# Altium schematic symbol library MicroController.SchLib: 67 symbols (part 3 of 4)
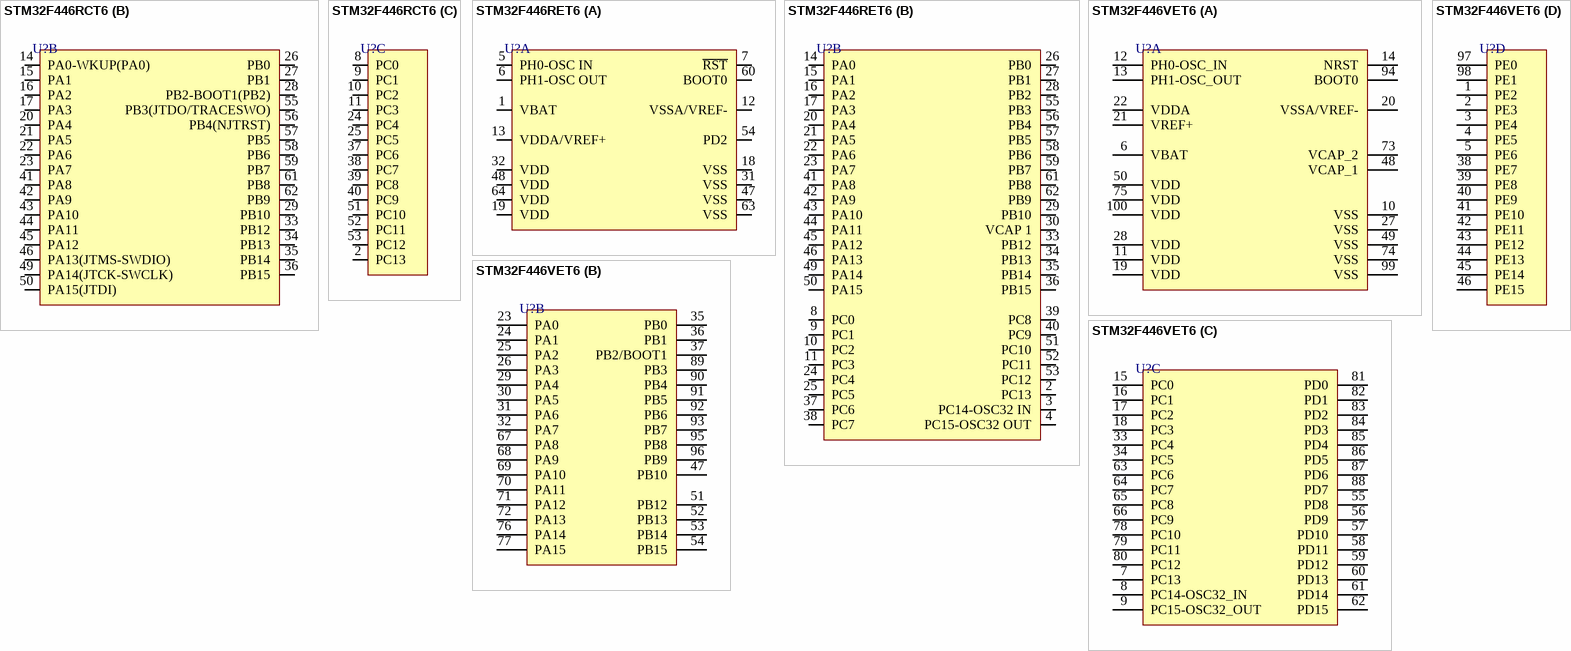
[diagram p16: symbols STM32F446RCT6 to STM32F446VET6]

## STM32F446RCT6
designator U?
IC MCU 32BIT 256KB FLASH 64LQFP; Manufacturer: STMicroelectronics; Manufacturer Part Number: STM32F446RCT6; Number of I/Os: 50; Frequency: 180MHz; RAM Size: 128KB; Min Supply Voltage: 1.7V; Max Supply Voltage: 3.6V; Supplier 1: Mouser; RoHS: Yes; Category: Microcontrollers; Stock 1: 998; Pricing 1: 1=10.62, 10=9.6, 50=8.98, 100=7.95, 1000=6.28, 10000=6.28 (USD); Case/Package: LQFP; Pins: 64; Memory Size: 256KB; RoHS Compliant: Yes; Reach SVHC Compliant: No; Lead Free: Lead Free; ComponentLink1URL: http://www.farnell.com/datasheets/2309063.pdf?src-supplier=Farnell; ComponentLink1Description: http://www.farnell.com/datasheets/2309063.pdf?src-supplier=Farnell; ComponentLink2URL: http://www.mouser.com/ds/2/389/stm32f446mc-956216.pdf?src-supplier=Mouser; ComponentLink2Description: http://www.mouser.com/ds/2/389/stm32f446mc-956216.pdf?src-supplier=Mouser; ComponentLink3URL: http://www.farnell.com/datasheets/2309063.pdf?src-supplier=Element14; ComponentLink3Description: http://www.farnell.com/datasheets/2309063.pdf?src-supplier=Element14; ComponentLink4URL: http://www.st.com/content/ccc/resource/technical/document/errata_sheet/c3/6b/f8/32/fc/01/48/6e/DM00155929.pdf/files/DM00155929.pdf/jcr:content/translations/en.DM00155929.pdf?src-supplier=Digi-Key; ComponentLink4Description: http://www.st.com/content/ccc/resource/technical/document/errata_sheet/c3/6b/f8/32/fc/01/48/6e/DM00155929.pdf/files/DM00155929.pdf/jcr:content/translations/en.DM00155929.pdf?src-supplier=Digi-Key; ComponentLink5URL: http://www.farnell.com/datasheets/2309063.pdf?src-supplier=Newark; ComponentLink5Description: http://www.farnell.com/datasheets/2309063.pdf?src-supplier=Newark; ComponentLink6URL: http://www.st.com/st-web-ui/static/active/en/resource/technical/document/datasheet/DM00141306.pdf?src-supplier=Avnet; ComponentLink6Description: http://www.st.com/st-web-ui/static/active/en/resource/technical/document/datasheet/DM00141306.pdf?src-supplier=Avnet; Supplier Part Number 1: 511-STM32F446RCT6; LCSC Part Number: C915971; Item Type: IC
footprint 64-LQFP (10x10)
part A pins: 1 VBAT, 3 PC14-OSC32_IN(PC14) "PC14/EVENTOUT/OSC32_IN", 4 PC15-OSC32_OUT(PC15) "PC15/EVENTOUT/OSC32_OUT", 5 PH0-OSC_IN(PH0) "PH0/EVENTOUT/OSC_IN", 6 PH1-OSC_OUT(PH1) "PH1/EVENTOUT/OSC_OUT", 7 NRST, 12 VSSA, 13 VDDA, 18 VSS, 19 VDD, 30 VCAP_1, 31 VSS, 32 VDD, 47 VSS, 48 VDD, 54 PD2 "PD2/TIM3_ETR,UART5_RX,SDIO_CMD,DCMI_D11,EVENTOUT", 60 BOOT0 "BOOT0/VPP", 63 VSS, 64 VDD
part B pins: 14 PA0-WKUP(PA0) "PA0-WKUP(PA0)/TIM2_CH1/TIM2_ETR,TIM5_CH1,TIM8_ETR,USART2_CTS,UART4_TX,EVENTOUT/ADC123_IN0,WKUP0/TAMP_2", 15 PA1 "PA1/TIM2_CH2,TIM5_CH2,USART2_RTS,UART4_RX,QUADSPI_BK1_IO3,SAI2_MCLK_B,EVENTOUT/ADC123_IN1", 16 PA2 "PA2/TIM2_CH3,TIM5_CH3,TIM9_CH1,USART2_TX,SAI2_SCK_B,EVENTOUT/ADC123_IN2", 17 PA3 "PA3/TIM2_CH4,TIM5_CH4,TIM9_CH2,SAI1_FS_A,USART2_RX,OTG_HS_ULPI_D0,EVENTOUT/ADC123_IN3", 20 PA4 "PA4/SPI1_NSS/I2S1_WS,SPI3_NSS/I2S3_WS,USART2_CK,OTG_HS_SOF,DCMI_HSYNC,EVENTOUT/ADC12_IN4,DAC_OUT1", 21 PA5 "PA5/TIM2_CH1/TIM2_ETR,TIM8_CH1N,SPI1_SCK/I2S1_CK,OTG_HS_ULPI_CK,EVENTOUT/ADC12_IN5,DAC_OUT2", 22 PA6 "PA6/TIM1_BKIN,TIM3_CH1,TIM8_BKIN,SPI1_MISO,I2S2_MCK,TIM13_CH1,DCMI_PIXCLK,EVENTOUT/ADC12_IN6", 23 PA7 "PA7/TIM1_CH1N,TIM3_CH2,TIM8_CH1N,SPI1_MOSI/I2S1_SD,TIM14_CH1,FMC_SDNWE,EVENTOUT/ADC12_IN7", 26 PB0 "PB0/TIM1_CH2N,TIM3_CH3,TIM8_CH2N,SPI3_MOSI/I2S3_SD,UART4_CTS,OTG_HS_ULPI_D1,SDIO_D1,EVENTOUT/ADC12_IN8", 27 PB1 "PB1/TIM1_CH3N,TIM3_CH4,TIM8_CH3N,OTG_HS_ULPI_D2,SDIO_D2,EVENTOUT/ADC12_IN9", 28 PB2-BOOT1(PB2) "PB2-BOOT1(PB2)/TIM2_CH4,SAI1_SD_A,SPI3_MOSI/I2S3_SD,QUADSPI_CLK,OTG_HS_ULPI_D4,SDIO_CK,EVENTOUT", 29 PB10 "PB10/TIM2_CH3,I2C2_SCL,SPI2_SCK/I2S2_CK,SAI1_SCK_A,USART3_TX,OTG_HS_ULPI_D3,EVENTOUT", 33 PB12 "PB12/TIM1_BKIN,I2C2_SMBA,SPI2_NSS/I2S2_WS,SAI1_SCK_B,USART3_CK,CAN2_RX,OTG_HS_ULPI_D5,OTG_HS_ID,EVENTOUT", 34 PB13 "PB13/TIM1_CH1N,SPI2_SCK/I2S2_CK,USART3_CTS,CAN2_TX,OTG_HS_ULPI_D6,EVENTOUT/OTG_HS_VBUS", 35 PB14 "PB14/TIM1_CH2N,TIM8_CH2N,SPI2_MISO,USART3_RTS,TIM12_CH1,OTG_HS_DM,EVENTOUT", 36 PB15 "PB15/RTC_REFIN,TIM1_CH3N,TIM8_CH3N,SPI2_MOSI/I2S2_SD,TIM12_CH2,OTG_HS_DP,EVENTOUT", 41 PA8 "PA8/MCO1,TIM1_CH1,I2C3_SCL,USART1_CK,OTG_FS_SOF,EVENTOUT", 42 PA9 "PA9/TIM1_CH2,I2C3_SMBA,SPI2_SCK/I2S2_CK,SAI1_SD_B,USART1_TX,DCMI_D0,EVENTOUT/OTG_FS_VBUS", 43 PA10 "PA10/TIM1_CH3,USART1_RX,OTG_FS_ID,DCMI_D1,EVENTOUT", 44 PA11 "PA11/TIM1_CH4,USART1_CTS,CAN1_RX,OTG_FS_DM,EVENTOUT", 45 PA12 "PA12/TIM1_ETR,USART1_RTS,SAI2_FS_B,CAN1_TX,OTG_FS_DP,EVENTOUT", 46 PA13(JTMS-SWDIO) "PA13/JTMS-SWDIO,EVENTOUT", 49 PA14(JTCK-SWCLK) "PA14/JTCK-SWCLK,EVENTOUT", 50 PA15(JTDI) "PA15/JTDI,TIM2_CH1/TIM2_ETR,HDMI_CEC,SPI1_NSS/I2S1_WS,SPI3_NSS/I2S3_WS,UART4_RTS,EVENTOUT", 55 PB3(JTDO/TRACESWO) "PB3/JTDO/TRACESWO,TIM2_CH2,I2C2_SDA,SPI1_SCK/I2S1_CK,SPI3_SCK/I2S3_CK,EVENTOUT", 56 PB4(NJTRST) "PB4/NJTRST,TIM3_CH1,I2C3_SDA,SPI1_MISO,SPI3_MISO,SPI2_NSS/I2S2_WS,EVENTOUT", 57 PB5 "PB5/TIM3_CH2,I2C1_SMBA,SPI1_MOSI/I2S1_SD,SPI3_MOSI/I2S3_SD,CAN2_RX,OTG_HS_ULPI_D7,FMC_SDCKE1,DCMI_D10,EVENTOUT", 58 PB6 "PB6/TIM4_CH1,HDMI_CEC,I2C1_SCL,USART1_TX,CAN2_TX,QUADSPI_BK1_NCS,FMC_SDNE1,DCMI_D5,EVENTOUT", 59 PB7 "PB7/TIM4_CH2,I2C1_SDA,USART1_RX,SPDIFRX_IN0,FMC_NL,DCMI_VSYNC,EVENTOUT", 61 PB8 "PB8/TIM2_CH1/TIM2_ETR,TIM4_CH3,TIM10_CH1,I2C1_SCL,CAN1_RX,SDIO_D4,DCMI_D6,EVENTOUT", 62 PB9 "PB9/TIM2_CH2,TIM4_CH4,TIM11_CH1,I2C1_SDA,SPI2_NSS/I2S2_WS,SAI1_FS_B,CAN1_TX,SDIO_D5,DCMI_D7,EVENTOUT"
part C pins: 2 PC13 "PC13/EVENTOUT/TAMP_1/WKUP1", 8 PC0 "PC0/SAI1_MCLK_B,OTG_HS_ULPI_STP,FMC_SDNWE,EVENTOUT/ADC123_IN10", 9 PC1 "PC1/SPI3_MOSI/I2S3_SD,SAI1_SD_A,SPI2_MOSI/I2S2_SD,EVENTOUT/ADC123_IN11", 10 PC2 "PC2/SPI2_MISO,OTG_HS_ULPI_DIR,FMC_SDNE0,EVENTOUT/ADC123_IN12", 11 PC3 "PC3/SPI2_MOSI/I2S2_SD,OTG_HS_ULPI_NXT,FMC_SDCKE0,EVENTOUT/ADC123_IN13", 24 PC4 "PC4/I2S1_MCK,SPDIFRX_IN2,FMC_SDNE0,EVENTOUT/ADC12_IN14", 25 PC5 "PC5/USART3_RX,SPDIFRX_IN3,FMC_SDCKE0,EVENTOUT/ADC12_IN15", 37 PC6 "PC6/TIM3_CH1,TIM8_CH1,FMPI2C1_SCL,I2S2_MCK,USART6_TX,SDIO_D6,DCMI_D0,EVENTOUT", 38 PC7 "PC7/TIM3_CH2,TIM8_CH2,FMPI2C1_SDA,SPI2_SCK/I2S2_CK,I2S3_MCK,SPDIFRX_IN1,USART6_RX,SDIO_D7,DCMI_D1,EVENTOUT", 39 PC8 "PC8/TRACED0,TIM3_CH3,TIM8_CH3,UART5_RTS,USART6_CK,SDIO_D0,DCMI_D2,EVENTOUT", 40 PC9 "PC9/MCO2,TIM3_CH4,TIM8_CH4,I2C3_SDA,I2S_CKIN,UART5_CTS,QUADSPI_BK1_IO0,SDIO_D1,DCMI_D3,EVENTOUT", 51 PC10 "PC10/SPI3_SCK/I2S3_CK,USART3_TX,UART4_TX,QUADSPI_BK1_IO1,SDIO_D2,DCMI_D8,EVENTOUT", 52 PC11 "PC11/SPI3_MISO,USART3_RX,UART4_RX,QUADSPI_BK2_NCS,SDIO_D3,DCMI_D4,EVENTOUT", 53 PC12 "PC12/I2C2_SDA,SPI3_MOSI/I2S3_SD,USART3_CK,UART5_TX,SDIO_CK,DCMI_D9,EVENTOUT"

## STM32F446RET6
designator U?
IC MCU 32BIT 512KB FLASH 64LQFP; Manufacturer: STMicroelectronics; Manufacturer Part Number: STM32F446RET6; Nominal Supply Current: 1.12uA; Number of A/D Converters: 3NUMBER; Number of Channels: 16NUMBER; Number of D/A Converters: 2NUMBER; Number of I2C Channels: 4NUMBER; Supplier: Future Electronics; LCSC Part Number: C69336; RoHS: Yes; Item Type: IC; Stock: 2720; Pricing: 160=5.32, 320=5.3, 480=5.28, 640=5.27, 800=5.24 (USD); Density: 512KB; Number of SPI Channels: 3NUMBER; Number of UART Channels: 2NUMBER; Number of ADC Channels: 16NUMBER; Number of PWM Channels: 4NUMBER; Number of USB Channels: 2NUMBER; Height: 1.6mm; ComponentLink1URL: http://www.mouser.com/ds/2/389/stm32f446mc-956216.pdf?src-supplier=Mouser; ComponentLink1Description: http://www.mouser.com/ds/2/389/stm32f446mc-956216.pdf?src-supplier=Mouser; ComponentLink2URL: http://www.farnell.com/datasheets/2309063.pdf?src-supplier=Farnell; ComponentLink2Description: http://www.farnell.com/datasheets/2309063.pdf?src-supplier=Farnell; ComponentLink3URL: https://datasheet.octopart.com/STM32F446RET6-STMicroelectronics-datasheet-58295083.pdf?src-supplier=Future+Electronics; ComponentLink3Description: https://datasheet.octopart.com/STM32F446RET6-STMicroelectronics-datasheet-58295083.pdf?src-supplier=Future+Electronics; ComponentLink4URL: http://www.st.com/content/ccc/resource/technical/document/datasheet/65/cb/75/50/53/d6/48/24/DM00141306.pdf/files/DM00141306.pdf/jcr:content/translations/en.DM00141306.pdf?src-supplier=Digikey; ComponentLink4Description: http://www.st.com/content/ccc/resource/technical/document/datasheet/65/cb/75/50/53/d6/48/24/DM00141306.pdf/files/DM00141306.pdf/jcr:content/translations/en.DM00141306.pdf?src-supplier=Digikey; ComponentLink5URL: http://www.farnell.com/datasheets/2309063.pdf?src-supplier=Element14; ComponentLink5Description: http://www.farnell.com/datasheets/2309063.pdf?src-supplier=Element14; ComponentLink6URL: https://datasheet.octopart.com/STM32F446RET6-STMicroelectronics-datasheet-41797127.pdf?src-supplier=Element14; ComponentLink6Description: https://datasheet.octopart.com/STM32F446RET6-STMicroelectronics-datasheet-41797127.pdf?src-supplier=Element14; ComponentLink7URL: http://www.farnell.com/datasheets/2309063.pdf?src-supplier=Newark; ComponentLink7Description: http://www.farnell.com/datasheets/2309063.pdf?src-supplier=Newark; ComponentLink8URL: https://datasheet.octopart.com/STM32F446RET6-STMicroelectronics-datasheet-83961502.pdf?src-supplier=SHENGYU+ELECTRONICS; ComponentLink8Description: https://datasheet.octopart.com/STM32F446RET6-STMicroelectronics-datasheet-83961502.pdf?src-supplier=SHENGYU+ELECTRONICS
footprint 64-LQFP (10x10)
part A pins: 1 VBAT, 5 PH0-OSC IN, 6 PH1-OSC OUT, 7 ~{RST}, 12 VSSA/VREF-, 13 VDDA/VREF+, 18 VSS, 19 VDD, 31 VSS, 32 VDD, 47 VSS, 48 VDD, 54 PD2, 60 BOOT0, 63 VSS, 64 VDD
part B pins: 2 PC13, 3 PC14-OSC32 IN, 4 PC15-OSC32 OUT, 8 PC0, 9 PC1, 10 PC2, 11 PC3, 14 PA0, 15 PA1, 16 PA2, 17 PA3, 20 PA4, 21 PA5, 22 PA6, 23 PA7, 24 PC4, 25 PC5, 26 PB0, 27 PB1, 28 PB2, 29 PB10, 30 VCAP 1, 33 PB12, 34 PB13, 35 PB14, 36 PB15, 37 PC6, 38 PC7, 39 PC8, 40 PC9, 41 PA8, 42 PA9, 43 PA10, 44 PA11, 45 PA12, 46 PA13, 49 PA14, 50 PA15, 51 PC10, 52 PC11, 53 PC12, 55 PB3, 56 PB4, 57 PB5, 58 PB6, 59 PB7, 61 PB8, 62 PB9

## STM32F446VET6
designator U?
IC MCU 32BIT 512KB FLASH 100LQFP; Manufacturer: STMicroelectronics; Manufacturer Part Number: STM32F446VET6; Package: LQFP (14x14); LCSC Part Number: C91929; Item Type: IC
footprint LQFP-100
part A pins: 6 VBAT, 10 VSS, 11 VDD, 12 PH0-OSC_IN, 13 PH1-OSC_OUT, 14 NRST, 19 VDD, 20 VSSA/VREF-, 21 VREF+, 22 VDDA, 27 VSS, 28 VDD, 48 VCAP_1, 49 VSS, 50 VDD, 73 VCAP_2, 74 VSS, 75 VDD, 94 BOOT0, 99 VSS, 100 VDD
part B pins: 23 PA0, 24 PA1, 25 PA2, 26 PA3, 29 PA4, 30 PA5, 31 PA6, 32 PA7, 35 PB0, 36 PB1, 37 PB2/BOOT1, 47 PB10, 51 PB12, 52 PB13, 53 PB14, 54 PB15, 67 PA8, 68 PA9, 69 PA10, 70 PA11, 71 PA12, 72 PA13, 76 PA14, 77 PA15, 89 PB3, 90 PB4, 91 PB5, 92 PB6, 93 PB7, 95 PB8, 96 PB9
part C pins: 7 PC13, 8 PC14-OSC32_IN, 9 PC15-OSC32_OUT, 15 PC0, 16 PC1, 17 PC2, 18 PC3, 33 PC4, 34 PC5, 55 PD8, 56 PD9, 57 PD10, 58 PD11, 59 PD12, 60 PD13, 61 PD14, 62 PD15, 63 PC6, 64 PC7, 65 PC8, 66 PC9, 78 PC10, 79 PC11, 80 PC12, 81 PD0, 82 PD1, 83 PD2, 84 PD3, 85 PD4, 86 PD5, 87 PD6, 88 PD7
part D pins: 1 PE2, 2 PE3, 3 PE4, 4 PE5, 5 PE6, 38 PE7, 39 PE8, 40 PE9, 41 PE10, 42 PE11, 43 PE12, 44 PE13, 45 PE14, 46 PE15, 97 PE0, 98 PE1

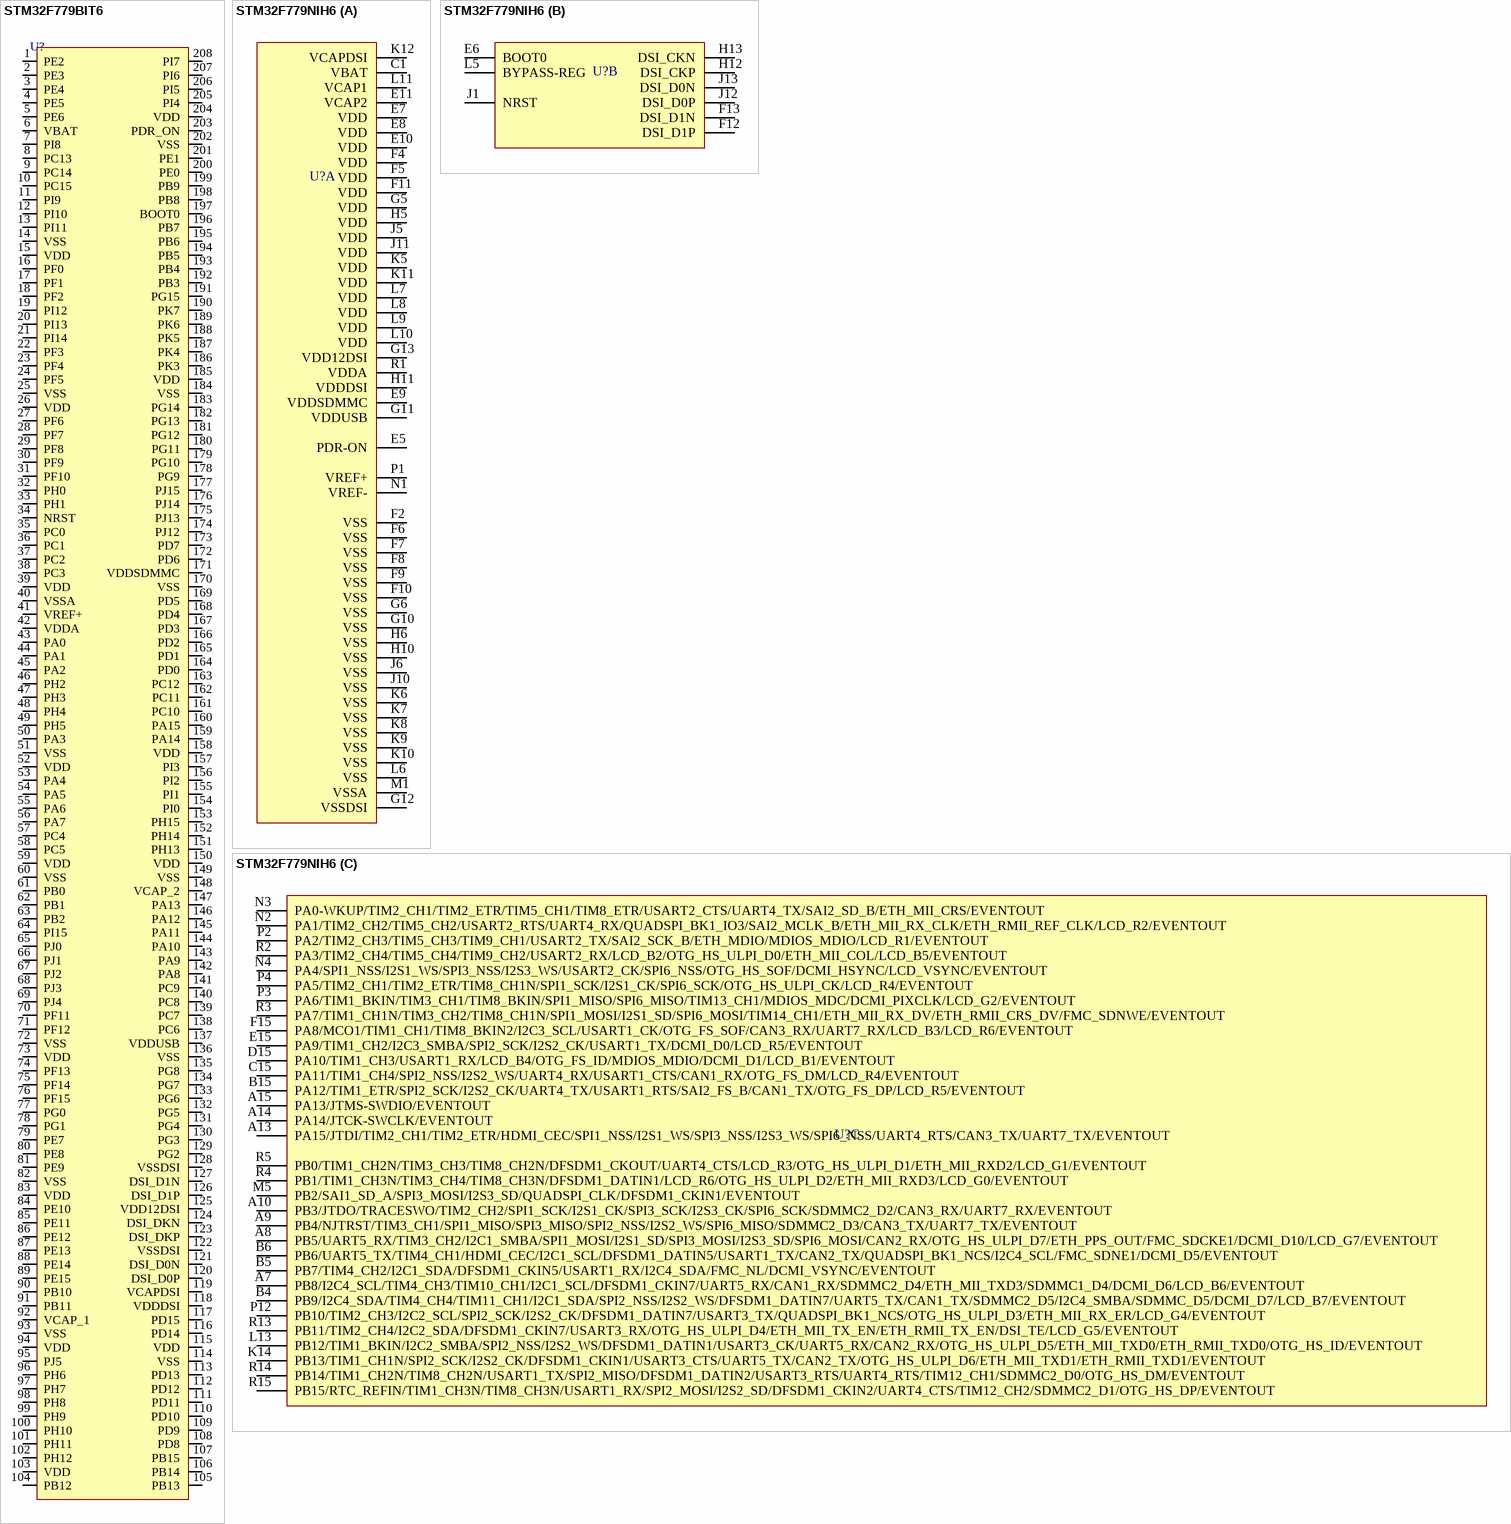
[diagram p9: symbols STM32F779BIT6 to STM32F779NIH6]

## STM32F779BIT6
designator U?
IC MCU 32BIT 2MB FLASH 208LQFP; Manufacturer: STMicroelectronics; Manufacturer Part Number: STM32F779BIT6; Item Type: Microcontrollers; Clock Rate: 26MHz; Frequency: 200MHz; Max Supply Voltage: 3.6V; Min Supply Voltage: 1.7V; Nominal Supply Current: 2.5µA; Number of A/D Converters: 3; Number of Channels: 24; Number of D/A Converters: 2; Number of I2C Channels: 4; Number of I/Os: 159; Number of SPI Channels: 6; Operating Supply Voltage: 3.3V; RAM Size: 512kB; Supplier: DigiKey; LCSC Part Number: 497-16658-ND; RoHS: Compliant; Stock: 55; Pricing: 1=23.79, 10=19.09, 25=17.916, 100=16.6262, 360=15.80744 (USD); China RoHS: Compliant; Flash Memory Size: 2MB; Length: 28mm; Lifecycle Status: Production; Max Operating Temperature: 85°C; Min Operating Temperature: -40°C; Number of Terminals: 208; Number of Timers/Counters: 2; Number of UART Channels: 4; Number of USART Channels: 4; REACH SVHC: Yes; Schedule B: 8542310000, 8542310000|8542310000|8542310000|8542310000|8542310000; Terminal Pitch: 500µm; Width: 28mm; ComponentLink1URL: https://datasheet.octopart.com:443/STM32F779BIT6-STMicroelectronics-datasheet-62336763.pdf?src-supplier=Future+Electronics; ComponentLink1Description: https://datasheet.octopart.com:443/STM32F779BIT6-STMicroelectronics-datasheet-62336763.pdf?src-supplier=Future+Electronics; ComponentLink2URL: https://datasheet.octopart.com:443/STM32F779BIT6-STMicroelectronics-datasheet-112249043.pdf?src-supplier=Farnell; ComponentLink2Description: https://datasheet.octopart.com:443/STM32F779BIT6-STMicroelectronics-datasheet-112249043.pdf?src-supplier=Farnell; ComponentLink3URL: https://datasheet.octopart.com:443/STM32F779BIT6-STMicroelectronics-datasheet-86670738.pdf?src-supplier=TME; ComponentLink3Description: https://datasheet.octopart.com:443/STM32F779BIT6-STMicroelectronics-datasheet-86670738.pdf?src-supplier=TME
footprint LQFP-208(28x28)
pins: 1 PE2, 2 PE3, 3 PE4, 4 PE5, 5 PE6, 6 VBAT, 7 PI8, 8 PC13, 9 PC14, 10 PC15, 11 PI9, 12 PI10, 13 PI11, 14 VSS, 15 VDD, 16 PF0, 17 PF1, 18 PF2, 19 PI12, 20 PI13, 21 PI14, 22 PF3, 23 PF4, 24 PF5, 25 VSS, 26 VDD, 27 PF6, 28 PF7, 29 PF8, 30 PF9, 31 PF10, 32 PH0, 33 PH1, 34 NRST, 35 PC0, 36 PC1, 37 PC2, 38 PC3, 39 VDD, 40 VSSA, 41 VREF+, 42 VDDA, 43 PA0, 44 PA1, 45 PA2, 46 PH2, 47 PH3, 48 PH4, 49 PH5, 50 PA3, 51 VSS, 52 VDD, 53 PA4, 54 PA5, 55 PA6, 56 PA7, 57 PC4, 58 PC5, 59 VDD, 60 VSS, 61 PB0, 62 PB1, 63 PB2, 64 PI15, 65 PJ0, 66 PJ1, 67 PJ2, 68 PJ3, 69 PJ4, 70 PF11, 71 PF12, 72 VSS, 73 VDD, 74 PF13, 75 PF14, 76 PF15, 77 PG0, 78 PG1, 79 PE7, 80 PE8, 81 PE9, 82 VSS, 83 VDD, 84 PE10, 85 PE11, 86 PE12, 87 PE13, 88 PE14, 89 PE15, 90 PB10, 91 PB11, 92 VCAP_1, 93 VSS, 94 VDD, 95 PJ5, 96 PH6, 97 PH7, 98 PH8, 99 PH9, 100 PH10, 101 PH11, 102 PH12, 103 VDD, 104 PB12, 105 PB13, 106 PB14, 107 PB15, 108 PD8, 109 PD9, 110 PD10, 111 PD11, 112 PD12, 113 PD13, 114 VSS, 115 VDD, 116 PD14, 117 PD15, 118 VDDDSI, 119 VCAPDSI, 120 DSI_D0P, 121 DSI_D0N, 122 VSSDSI, 123 DSI_DKP, 124 DSI_DKN, 125 VDD12DSI, 126 DSI_D1P, 127 DSI_D1N, 128 VSSDSI, 129 PG2, 130 PG3, 131 PG4, 132 PG5, 133 PG6, 134 PG7, 135 PG8, 136 VSS, 137 VDDUSB, 138 PC6, 139 PC7, 140 PC8, 141 PC9, 142 PA8, 143 PA9, 144 PA10, 145 PA11, 146 PA12, 147 PA13, 148 VCAP_2, 149 VSS, 150 VDD, 151 PH13, 152 PH14, 153 PH15, 154 PI0, 155 PI1, 156 PI2, 157 PI3, 158 VDD, 159 PA14, 160 PA15, 161 PC10, 162 PC11, 163 PC12, 164 PD0, 165 PD1, 166 PD2, 167 PD3, 168 PD4, 169 PD5, 170 VSS, 171 VDDSDMMC, 172 PD6, 173 PD7, 174 PJ12, 175 PJ13, 176 PJ14, 177 PJ15, 178 PG9, 179 PG10, 180 PG11, 181 PG12, 182 PG13, 183 PG14, 184 VSS, 185 VDD, 186 PK3, 187 PK4, 188 PK5, 189 PK6, 190 PK7, 191 PG15, 192 PB3, 193 PB4, 194 PB5, 195 PB6, 196 PB7, 197 BOOT0, 198 PB8, 199 PB9, 200 PE0, 201 PE1, 202 VSS, 203 PDR_ON, 204 VDD, 205 PI4, 206 PI5, 207 PI6, 208 PI7

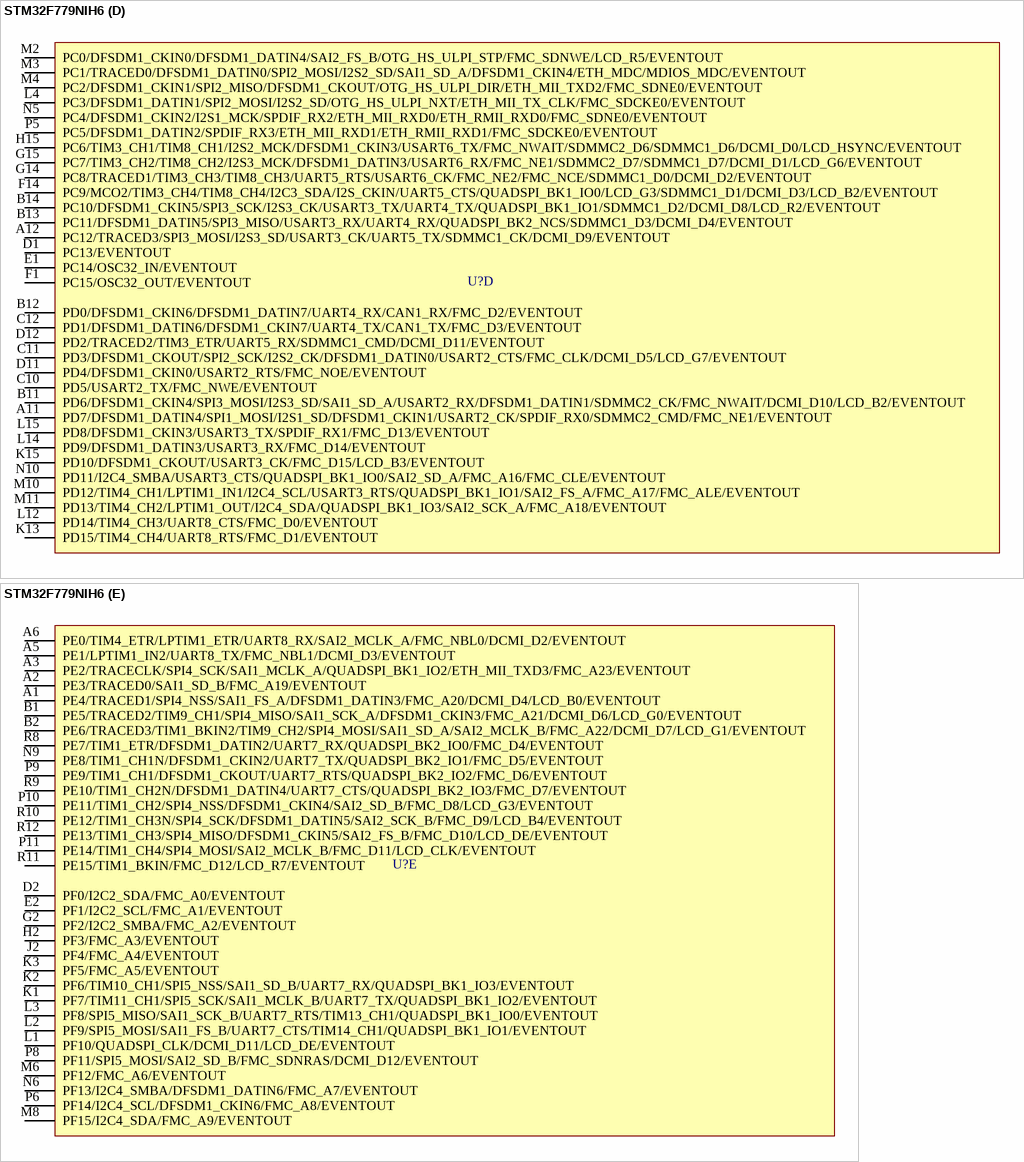
[diagram p10: symbol STM32F779NIH6]

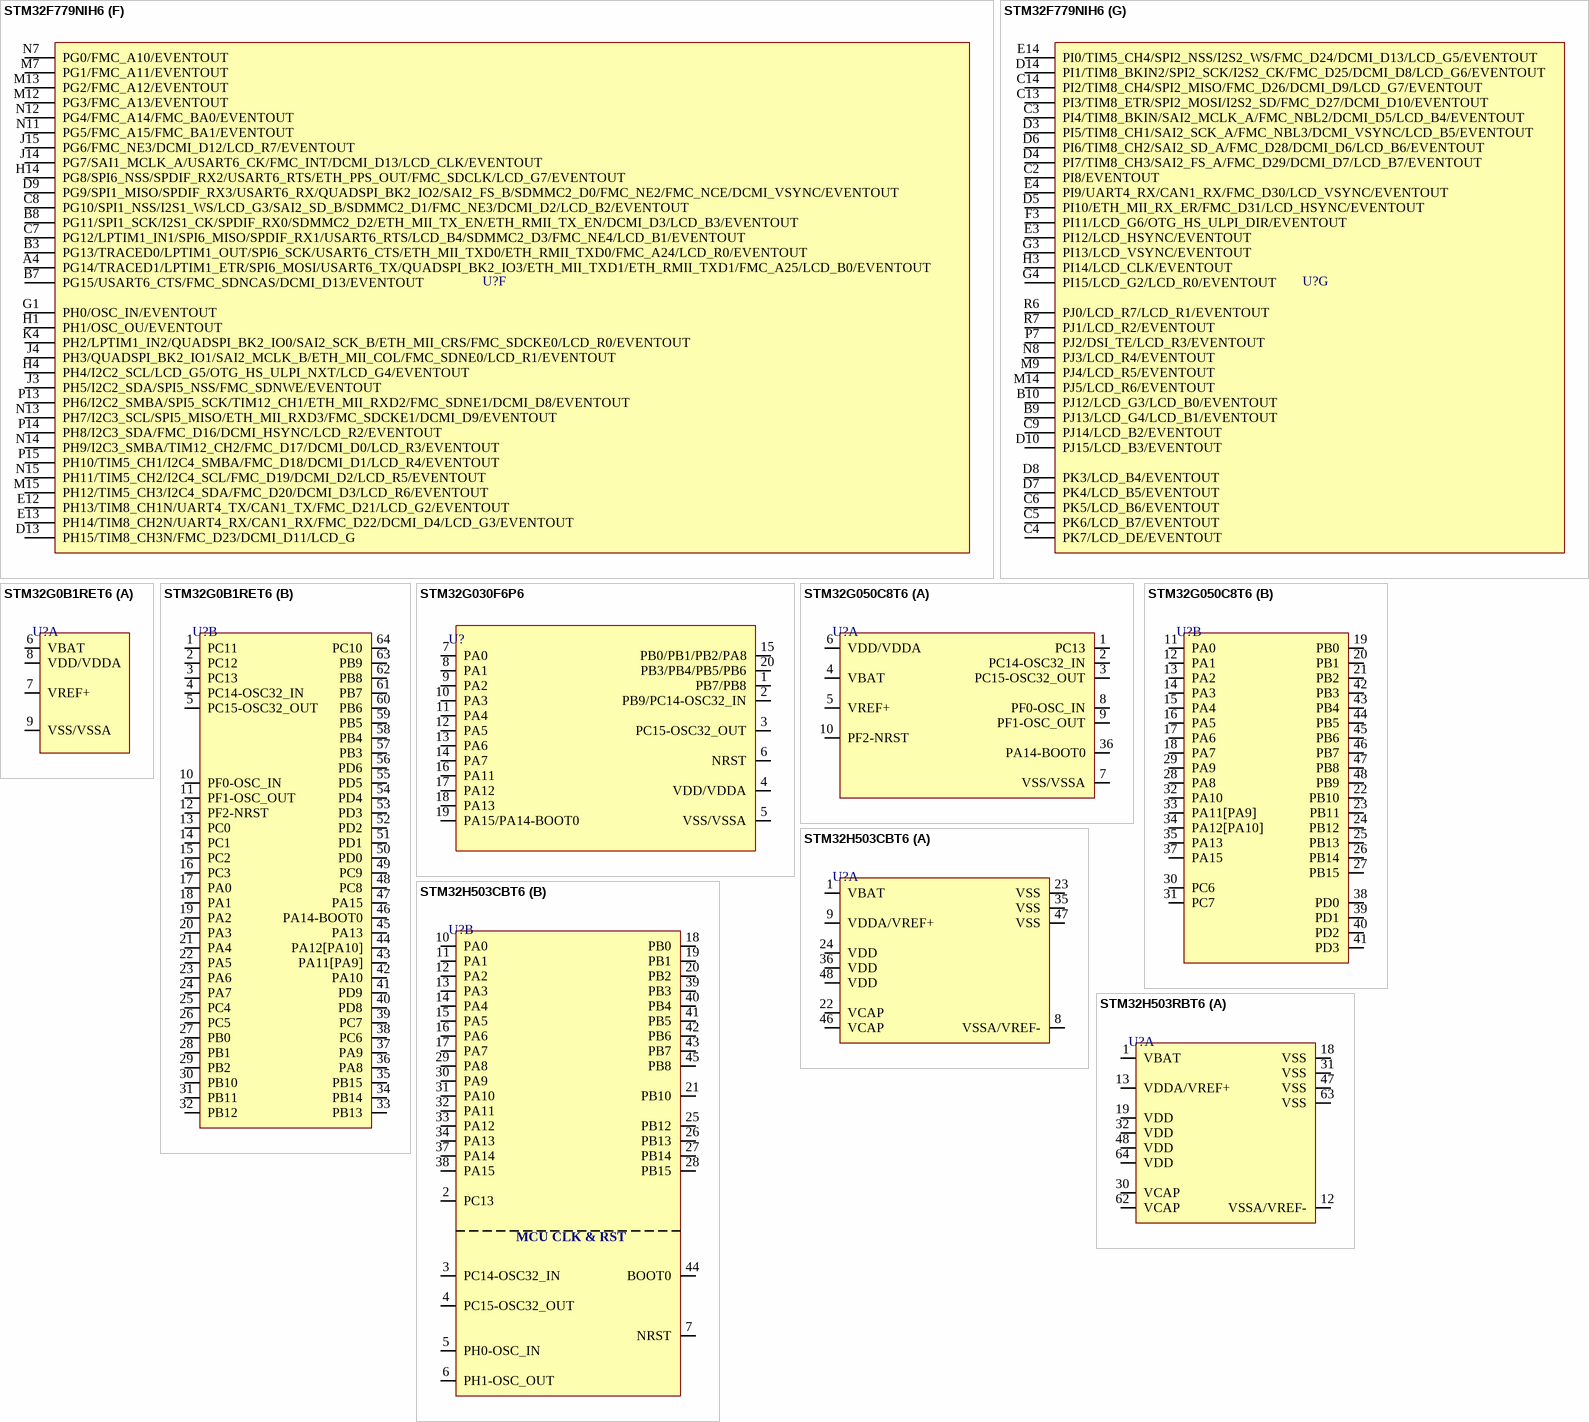
[diagram p11: symbols STM32F779NIH6 to STM32H503RBT6]

## STM32F779NIH6
designator U?
IC MCU 32BIT 2MB FLASH 216TFBGA; Manufacturer: STMicroelectronics; Manufacturer Part Number: STM32F779NIH6; Item Type: Microcontrollers; Clock Rate: 50MHz; Frequency: 216MHz; Max Supply Current: 100mA; Max Supply Voltage: 3.6V; Min Supply Voltage: 1.7V; Nominal Supply Current: 2.5µA; Number of A/D Converters: 3; Number of Channels: 24; Number of D/A Converters: 2; Number of I2C Channels: 4; Number of I/Os: 8; Number of Interrupts: 16; Number of SPI Channels: 6; Operating Supply Voltage: 1.8V; RAM Size: 532kB; Supplier: Arrow Electronics; LCSC Part Number: C1337301; RoHS: Compliant; Stock: 113; Pricing: 1=21.1, 10=17.87, 25=17.11, 100=15.83 (USD); China RoHS: Compliant; Flash Memory Size: 2MB; Height - Seated (Max): 1.1mm; Length: 13mm; Lifecycle Status: Production; Max Operating Temperature: 85°C; Memory Format: FLASH; Min Operating Temperature: -40°C; Number of Terminals: 216; Number of Timers/Counters: 16; Number of UART Channels: 4; Number of USART Channels: 4; REACH SVHC: Yes; Schedule B: 8542310000, 8542310000|8542310000|8542310000|8542310000|8542310000; Terminal Pitch: 800µm; Width: 13mm; ComponentLink1URL: https://datasheet.octopart.com:443/STM32F779NIH6-STMicroelectronics-datasheet-62336763.pdf?src-supplier=STMicroelectronics; ComponentLink1Description: https://datasheet.octopart.com:443/STM32F779NIH6-STMicroelectronics-datasheet-62336763.pdf?src-supplier=STMicroelectronics; ComponentLink2URL: https://datasheet.octopart.com:443/STM32F779NIH6-STMicroelectronics-datasheet-62045802.pdf?src-supplier=STMicroelectronics; ComponentLink2Description: https://datasheet.octopart.com:443/STM32F779NIH6-STMicroelectronics-datasheet-62045802.pdf?src-supplier=STMicroelectronics; ComponentLink3URL: https://datasheet.octopart.com:443/STM32F779NIH6-STMicroelectronics-datasheet-112249043.pdf?src-supplier=STMicroelectronics+SCT; ComponentLink3Description: https://datasheet.octopart.com:443/STM32F779NIH6-STMicroelectronics-datasheet-112249043.pdf?src-supplier=STMicroelectronics+SCT
footprint TFBGA-216(13x13)
part A pins: C1 VBAT (power), E5 PDR-ON (power), E7 VDD (power), E8 VDD (power), E9 VDDSDMMC (power), E10 VDD (power), E11 VCAP2 (power), F2 VSS (power), F4 VDD (power), F5 VDD (power), F6 VSS (power), F7 VSS (power), F8 VSS (power), F9 VSS (power), F10 VSS (power), F11 VDD (power), G5 VDD (power), G6 VSS (power), G10 VSS (power), G11 VDDUSB (power), G12 VSSDSI (power), G13 VDD12DSI (power), H5 VDD (power), H6 VSS (power), H10 VSS (power), H11 VDDDSI (power), J5 VDD (power), J6 VSS (power), J10 VSS (power), J11 VDD (power), K5 VDD (power), K6 VSS (power), K7 VSS (power), K8 VSS (power), K9 VSS (power), K10 VSS (power), K11 VDD (power), K12 VCAPDSI (power), L6 VSS (power), L7 VDD (power), L8 VDD (power), L9 VDD (power), L10 VDD (power), L11 VCAP1 (power), M1 VSSA (power), N1 VREF- (power), P1 VREF+ (power), R1 VDDA (power)
part B pins: E6 BOOT0, F12 DSI_D1P, F13 DSI_D1N, H12 DSI_CKP, H13 DSI_CKN, J1 NRST, J12 DSI_D0P, J13 DSI_D0N, L5 BYPASS-REG
part C pins: A7 PB8/I2C4_SCL/TIM4_CH3/TIM10_CH1/I2C1_SCL/DFSDM1_CKIN7/UART5_RX/CAN1_RX/SDMMC2_D4/ETH_MII_TXD3/SDMMC1_D4/DCMI_D6/LCD_B6/EVENTOUT, A8 PB5/UART5_RX/TIM3_CH2/I2C1_SMBA/SPI1_MOSI/I2S1_SD/SPI3_MOSI/I2S3_SD/SPI6_MOSI/CAN2_RX/OTG_HS_ULPI_D7/ETH_PPS_OUT/FMC_SDCKE1/DCMI_D10/LCD_G7/EVENTOUT, A9 PB4/NJTRST/TIM3_CH1/SPI1_MISO/SPI3_MISO/SPI2_NSS/I2S2_WS/SPI6_MISO/SDMMC2_D3/CAN3_TX/UART7_TX/EVENTOUT, A10 PB3/JTDO/TRACESWO/TIM2_CH2/SPI1_SCK/I2S1_CK/SPI3_SCK/I2S3_CK/SPI6_SCK/SDMMC2_D2/CAN3_RX/UART7_RX/EVENTOUT, A13 PA15/JTDI/TIM2_CH1/TIM2_ETR/HDMI_CEC/SPI1_NSS/I2S1_WS/SPI3_NSS/I2S3_WS/SPI6_NSS/UART4_RTS/CAN3_TX/UART7_TX/EVENTOUT, A14 PA14/JTCK-SWCLK/EVENTOUT, A15 PA13/JTMS-SWDIO/EVENTOUT, B4 PB9/I2C4_SDA/TIM4_CH4/TIM11_CH1/I2C1_SDA/SPI2_NSS/I2S2_WS/DFSDM1_DATIN7/UART5_TX/CAN1_TX/SDMMC2_D5/I2C4_SMBA/SDMMC_D5/DCMI_D7/LCD_B7/EVENTOUT, B5 PB7/TIM4_CH2/I2C1_SDA/DFSDM1_CKIN5/USART1_RX/I2C4_SDA/FMC_NL/DCMI_VSYNC/EVENTOUT, B6 PB6/UART5_TX/TIM4_CH1/HDMI_CEC/I2C1_SCL/DFSDM1_DATIN5/USART1_TX/CAN2_TX/QUADSPI_BK1_NCS/I2C4_SCL/FMC_SDNE1/DCMI_D5/EVENTOUT, B15 PA12/TIM1_ETR/SPI2_SCK/I2S2_CK/UART4_TX/USART1_RTS/SAI2_FS_B/CAN1_TX/OTG_FS_DP/LCD_R5/EVENTOUT, C15 PA11/TIM1_CH4/SPI2_NSS/I2S2_WS/UART4_RX/USART1_CTS/CAN1_RX/OTG_FS_DM/LCD_R4/EVENTOUT, D15 PA10/TIM1_CH3/USART1_RX/LCD_B4/OTG_FS_ID/MDIOS_MDIO/DCMI_D1/LCD_B1/EVENTOUT, E15 PA9/TIM1_CH2/I2C3_SMBA/SPI2_SCK/I2S2_CK/USART1_TX/DCMI_D0/LCD_R5/EVENTOUT, F15 PA8/MCO1/TIM1_CH1/TIM8_BKIN2/I2C3_SCL/USART1_CK/OTG_FS_SOF/CAN3_RX/UART7_RX/LCD_B3/LCD_R6/EVENTOUT, K14 PB13/TIM1_CH1N/SPI2_SCK/I2S2_CK/DFSDM1_CKIN1/USART3_CTS/UART5_TX/CAN2_TX/OTG_HS_ULPI_D6/ETH_MII_TXD1/ETH_RMII_TXD1/EVENTOUT, L13 PB12/TIM1_BKIN/I2C2_SMBA/SPI2_NSS/I2S2_WS/DFSDM1_DATIN1/USART3_CK/UART5_RX/CAN2_RX/OTG_HS_ULPI_D5/ETH_MII_TXD0/ETH_RMII_TXD0/OTG_HS_ID/EVENTOUT, M5 PB2/SAI1_SD_A/SPI3_MOSI/I2S3_SD/QUADSPI_CLK/DFSDM1_CKIN1/EVENTOUT, N2 PA1/TIM2_CH2/TIM5_CH2/USART2_RTS/UART4_RX/QUADSPI_BK1_IO3/SAI2_MCLK_B/ETH_MII_RX_CLK/ETH_RMII_REF_CLK/LCD_R2/EVENTOUT, N3 PA0-WKUP/TIM2_CH1/TIM2_ETR/TIM5_CH1/TIM8_ETR/USART2_CTS/UART4_TX/SAI2_SD_B/ETH_MII_CRS/EVENTOUT, N4 PA4/SPI1_NSS/I2S1_WS/SPI3_NSS/I2S3_WS/USART2_CK/SPI6_NSS/OTG_HS_SOF/DCMI_HSYNC/LCD_VSYNC/EVENTOUT, P2 PA2/TIM2_CH3/TIM5_CH3/TIM9_CH1/USART2_TX/SAI2_SCK_B/ETH_MDIO/MDIOS_MDIO/LCD_R1/EVENTOUT, P3 PA6/TIM1_BKIN/TIM3_CH1/TIM8_BKIN/SPI1_MISO/SPI6_MISO/TIM13_CH1/MDIOS_MDC/DCMI_PIXCLK/LCD_G2/EVENTOUT, P4 PA5/TIM2_CH1/TIM2_ETR/TIM8_CH1N/SPI1_SCK/I2S1_CK/SPI6_SCK/OTG_HS_ULPI_CK/LCD_R4/EVENTOUT, P12 PB10/TIM2_CH3/I2C2_SCL/SPI2_SCK/I2S2_CK/DFSDM1_DATIN7/USART3_TX/QUADSPI_BK1_NCS/OTG_HS_ULPI_D3/ETH_MII_RX_ER/LCD_G4/EVENTOUT, R2 PA3/TIM2_CH4/TIM5_CH4/TIM9_CH2/USART2_RX/LCD_B2/OTG_HS_ULPI_D0/ETH_MII_COL/LCD_B5/EVENTOUT, R3 PA7/TIM1_CH1N/TIM3_CH2/TIM8_CH1N/SPI1_MOSI/I2S1_SD/SPI6_MOSI/TIM14_CH1/ETH_MII_RX_DV/ETH_RMII_CRS_DV/FMC_SDNWE/EVENTOUT, R4 PB1/TIM1_CH3N/TIM3_CH4/TIM8_CH3N/DFSDM1_DATIN1/LCD_R6/OTG_HS_ULPI_D2/ETH_MII_RXD3/LCD_G0/EVENTOUT, R5 PB0/TIM1_CH2N/TIM3_CH3/TIM8_CH2N/DFSDM1_CKOUT/UART4_CTS/LCD_R3/OTG_HS_ULPI_D1/ETH_MII_RXD2/LCD_G1/EVENTOUT, R13 PB11/TIM2_CH4/I2C2_SDA/DFSDM1_CKIN7/USART3_RX/OTG_HS_ULPI_D4/ETH_MII_TX_EN/ETH_RMII_TX_EN/DSI_TE/LCD_G5/EVENTOUT, R14 PB14/TIM1_CH2N/TIM8_CH2N/USART1_TX/SPI2_MISO/DFSDM1_DATIN2/USART3_RTS/UART4_RTS/TIM12_CH1/SDMMC2_D0/OTG_HS_DM/EVENTOUT, R15 PB15/RTC_REFIN/TIM1_CH3N/TIM8_CH3N/USART1_RX/SPI2_MOSI/I2S2_SD/DFSDM1_CKIN2/UART4_CTS/TIM12_CH2/SDMMC2_D1/OTG_HS_DP/EVENTOUT
part D pins: A11 PD7/DFSDM1_DATIN4/SPI1_MOSI/I2S1_SD/DFSDM1_CKIN1/USART2_CK/SPDIF_RX0/SDMMC2_CMD/FMC_NE1/EVENTOUT, A12 PC12/TRACED3/SPI3_MOSI/I2S3_SD/USART3_CK/UART5_TX/SDMMC1_CK/DCMI_D9/EVENTOUT, B11 PD6/DFSDM1_CKIN4/SPI3_MOSI/I2S3_SD/SAI1_SD_A/USART2_RX/DFSDM1_DATIN1/SDMMC2_CK/FMC_NWAIT/DCMI_D10/LCD_B2/EVENTOUT, B12 PD0/DFSDM1_CKIN6/DFSDM1_DATIN7/UART4_RX/CAN1_RX/FMC_D2/EVENTOUT, B13 PC11/DFSDM1_DATIN5/SPI3_MISO/USART3_RX/UART4_RX/QUADSPI_BK2_NCS/SDMMC1_D3/DCMI_D4/EVENTOUT, B14 PC10/DFSDM1_CKIN5/SPI3_SCK/I2S3_CK/USART3_TX/UART4_TX/QUADSPI_BK1_IO1/SDMMC1_D2/DCMI_D8/LCD_R2/EVENTOUT, C10 PD5/USART2_TX/FMC_NWE/EVENTOUT, C11 PD3/DFSDM1_CKOUT/SPI2_SCK/I2S2_CK/DFSDM1_DATIN0/USART2_CTS/FMC_CLK/DCMI_D5/LCD_G7/EVENTOUT, C12 PD1/DFSDM1_DATIN6/DFSDM1_CKIN7/UART4_TX/CAN1_TX/FMC_D3/EVENTOUT, D1 PC13/EVENTOUT, D11 PD4/DFSDM1_CKIN0/USART2_RTS/FMC_NOE/EVENTOUT, D12 PD2/TRACED2/TIM3_ETR/UART5_RX/SDMMC1_CMD/DCMI_D11/EVENTOUT, E1 PC14/OSC32_IN/EVENTOUT, F1 PC15/OSC32_OUT/EVENTOUT, F14 PC9/MCO2/TIM3_CH4/TIM8_CH4/I2C3_SDA/I2S_CKIN/UART5_CTS/QUADSPI_BK1_IO0/LCD_G3/SDMMC1_D1/DCMI_D3/LCD_B2/EVENTOUT, G14 PC8/TRACED1/TIM3_CH3/TIM8_CH3/UART5_RTS/USART6_CK/FMC_NE2/FMC_NCE/SDMMC1_D0/DCMI_D2/EVENTOUT, G15 PC7/TIM3_CH2/TIM8_CH2/I2S3_MCK/DFSDM1_DATIN3/USART6_RX/FMC_NE1/SDMMC2_D7/SDMMC1_D7/DCMI_D1/LCD_G6/EVENTOUT, H15 PC6/TIM3_CH1/TIM8_CH1/I2S2_MCK/DFSDM1_CKIN3/USART6_TX/FMC_NWAIT/SDMMC2_D6/SDMMC1_D6/DCMI_D0/LCD_HSYNC/EVENTOUT, K13 PD15/TIM4_CH4/UART8_RTS/FMC_D1/EVENTOUT, K15 PD10/DFSDM1_CKOUT/USART3_CK/FMC_D15/LCD_B3/EVENTOUT, L4 PC3/DFSDM1_DATIN1/SPI2_MOSI/I2S2_SD/OTG_HS_ULPI_NXT/ETH_MII_TX_CLK/FMC_SDCKE0/EVENTOUT, L12 PD14/TIM4_CH3/UART8_CTS/FMC_D0/EVENTOUT, L14 PD9/DFSDM1_DATIN3/USART3_RX/FMC_D14/EVENTOUT, L15 PD8/DFSDM1_CKIN3/USART3_TX/SPDIF_RX1/FMC_D13/EVENTOUT, M2 PC0/DFSDM1_CKIN0/DFSDM1_DATIN4/SAI2_FS_B/OTG_HS_ULPI_STP/FMC_SDNWE/LCD_R5/EVENTOUT, M3 PC1/TRACED0/DFSDM1_DATIN0/SPI2_MOSI/I2S2_SD/SAI1_SD_A/DFSDM1_CKIN4/ETH_MDC/MDIOS_MDC/EVENTOUT, M4 PC2/DFSDM1_CKIN1/SPI2_MISO/DFSDM1_CKOUT/OTG_HS_ULPI_DIR/ETH_MII_TXD2/FMC_SDNE0/EVENTOUT, M10 PD12/TIM4_CH1/LPTIM1_IN1/I2C4_SCL/USART3_RTS/QUADSPI_BK1_IO1/SAI2_FS_A/FMC_A17/FMC_ALE/EVENTOUT, M11 PD13/TIM4_CH2/LPTIM1_OUT/I2C4_SDA/QUADSPI_BK1_IO3/SAI2_SCK_A/FMC_A18/EVENTOUT, N5 PC4/DFSDM1_CKIN2/I2S1_MCK/SPDIF_RX2/ETH_MII_RXD0/ETH_RMII_RXD0/FMC_SDNE0/EVENTOUT, N10 PD11/I2C4_SMBA/USART3_CTS/QUADSPI_BK1_IO0/SAI2_SD_A/FMC_A16/FMC_CLE/EVENTOUT, P5 PC5/DFSDM1_DATIN2/SPDIF_RX3/ETH_MII_RXD1/ETH_RMII_RXD1/FMC_SDCKE0/EVENTOUT
part E pins: A1 PE4/TRACED1/SPI4_NSS/SAI1_FS_A/DFSDM1_DATIN3/FMC_A20/DCMI_D4/LCD_B0/EVENTOUT, A2 PE3/TRACED0/SAI1_SD_B/FMC_A19/EVENTOUT, A3 PE2/TRACECLK/SPI4_SCK/SAI1_MCLK_A/QUADSPI_BK1_IO2/ETH_MII_TXD3/FMC_A23/EVENTOUT, A5 PE1/LPTIM1_IN2/UART8_TX/FMC_NBL1/DCMI_D3/EVENTOUT, A6 PE0/TIM4_ETR/LPTIM1_ETR/UART8_RX/SAI2_MCLK_A/FMC_NBL0/DCMI_D2/EVENTOUT, B1 PE5/TRACED2/TIM9_CH1/SPI4_MISO/SAI1_SCK_A/DFSDM1_CKIN3/FMC_A21/DCMI_D6/LCD_G0/EVENTOUT, B2 PE6/TRACED3/TIM1_BKIN2/TIM9_CH2/SPI4_MOSI/SAI1_SD_A/SAI2_MCLK_B/FMC_A22/DCMI_D7/LCD_G1/EVENTOUT, D2 PF0/I2C2_SDA/FMC_A0/EVENTOUT, E2 PF1/I2C2_SCL/FMC_A1/EVENTOUT, G2 PF2/I2C2_SMBA/FMC_A2/EVENTOUT, H2 PF3/FMC_A3/EVENTOUT, J2 PF4/FMC_A4/EVENTOUT, K1 PF7/TIM11_CH1/SPI5_SCK/SAI1_MCLK_B/UART7_TX/QUADSPI_BK1_IO2/EVENTOUT, K2 PF6/TIM10_CH1/SPI5_NSS/SAI1_SD_B/UART7_RX/QUADSPI_BK1_IO3/EVENTOUT, K3 PF5/FMC_A5/EVENTOUT, L1 PF10/QUADSPI_CLK/DCMI_D11/LCD_DE/EVENTOUT, L2 PF9/SPI5_MOSI/SAI1_FS_B/UART7_CTS/TIM14_CH1/QUADSPI_BK1_IO1/EVENTOUT, L3 PF8/SPI5_MISO/SAI1_SCK_B/UART7_RTS/TIM13_CH1/QUADSPI_BK1_IO0/EVENTOUT, M6 PF12/FMC_A6/EVENTOUT, M8 PF15/I2C4_SDA/FMC_A9/EVENTOUT, N6 PF13/I2C4_SMBA/DFSDM1_DATIN6/FMC_A7/EVENTOUT, N9 PE8/TIM1_CH1N/DFSDM1_CKIN2/UART7_TX/QUADSPI_BK2_IO1/FMC_D5/EVENTOUT, P6 PF14/I2C4_SCL/DFSDM1_CKIN6/FMC_A8/EVENTOUT, P8 PF11/SPI5_MOSI/SAI2_SD_B/FMC_SDNRAS/DCMI_D12/EVENTOUT, P9 PE9/TIM1_CH1/DFSDM1_CKOUT/UART7_RTS/QUADSPI_BK2_IO2/FMC_D6/EVENTOUT, P10 PE11/TIM1_CH2/SPI4_NSS/DFSDM1_CKIN4/SAI2_SD_B/FMC_D8/LCD_G3/EVENTOUT, P11 PE14/TIM1_CH4/SPI4_MOSI/SAI2_MCLK_B/FMC_D11/LCD_CLK/EVENTOUT, R8 PE7/TIM1_ETR/DFSDM1_DATIN2/UART7_RX/QUADSPI_BK2_IO0/FMC_D4/EVENTOUT, R9 PE10/TIM1_CH2N/DFSDM1_DATIN4/UART7_CTS/QUADSPI_BK2_IO3/FMC_D7/EVENTOUT, R10 PE12/TIM1_CH3N/SPI4_SCK/DFSDM1_DATIN5/SAI2_SCK_B/FMC_D9/LCD_B4/EVENTOUT, R11 PE15/TIM1_BKIN/FMC_D12/LCD_R7/EVENTOUT, R12 PE13/TIM1_CH3/SPI4_MISO/DFSDM1_CKIN5/SAI2_FS_B/FMC_D10/LCD_DE/EVENTOUT
part F pins: A4 PG14/TRACED1/LPTIM1_ETR/SPI6_MOSI/USART6_TX/QUADSPI_BK2_IO3/ETH_MII_TXD1/ETH_RMII_TXD1/FMC_A25/LCD_B0/EVENTOUT, B3 PG13/TRACED0/LPTIM1_OUT/SPI6_SCK/USART6_CTS/ETH_MII_TXD0/ETH_RMII_TXD0/FMC_A24/LCD_R0/EVENTOUT, B7 PG15/USART6_CTS/FMC_SDNCAS/DCMI_D13/EVENTOUT, B8 PG11/SPI1_SCK/I2S1_CK/SPDIF_RX0/SDMMC2_D2/ETH_MII_TX_EN/ETH_RMII_TX_EN/DCMI_D3/LCD_B3/EVENTOUT, C7 PG12/LPTIM1_IN1/SPI6_MISO/SPDIF_RX1/USART6_RTS/LCD_B4/SDMMC2_D3/FMC_NE4/LCD_B1/EVENTOUT, C8 PG10/SPI1_NSS/I2S1_WS/LCD_G3/SAI2_SD_B/SDMMC2_D1/FMC_NE3/DCMI_D2/LCD_B2/EVENTOUT, D9 PG9/SPI1_MISO/SPDIF_RX3/USART6_RX/QUADSPI_BK2_IO2/SAI2_FS_B/SDMMC2_D0/FMC_NE2/FMC_NCE/DCMI_VSYNC/EVENTOUT, D13 PH15/TIM8_CH3N/FMC_D23/DCMI_D11/LCD_G, E12 PH13/TIM8_CH1N/UART4_TX/CAN1_TX/FMC_D21/LCD_G2/EVENTOUT, E13 PH14/TIM8_CH2N/UART4_RX/CAN1_RX/FMC_D22/DCMI_D4/LCD_G3/EVENTOUT, G1 PH0/OSC_IN/EVENTOUT, H1 PH1/OSC_OU/EVENTOUT, H4 PH4/I2C2_SCL/LCD_G5/OTG_HS_ULPI_NXT/LCD_G4/EVENTOUT, H14 PG8/SPI6_NSS/SPDIF_RX2/USART6_RTS/ETH_PPS_OUT/FMC_SDCLK/LCD_G7/EVENTOUT, J3 PH5/I2C2_SDA/SPI5_NSS/FMC_SDNWE/EVENTOUT, J4 PH3/QUADSPI_BK2_IO1/SAI2_MCLK_B/ETH_MII_COL/FMC_SDNE0/LCD_R1/EVENTOUT, J14 PG7/SAI1_MCLK_A/USART6_CK/FMC_INT/DCMI_D13/LCD_CLK/EVENTOUT, J15 PG6/FMC_NE3/DCMI_D12/LCD_R7/EVENTOUT, K4 PH2/LPTIM1_IN2/QUADSPI_BK2_IO0/SAI2_SCK_B/ETH_MII_CRS/FMC_SDCKE0/LCD_R0/EVENTOUT, M7 PG1/FMC_A11/EVENTOUT, M12 PG3/FMC_A13/EVENTOUT, M13 PG2/FMC_A12/EVENTOUT, M15 PH12/TIM5_CH3/I2C4_SDA/FMC_D20/DCMI_D3/LCD_R6/EVENTOUT, N7 PG0/FMC_A10/EVENTOUT, N11 PG5/FMC_A15/FMC_BA1/EVENTOUT, N12 PG4/FMC_A14/FMC_BA0/EVENTOUT, N13 PH7/I2C3_SCL/SPI5_MISO/ETH_MII_RXD3/FMC_SDCKE1/DCMI_D9/EVENTOUT, N14 PH9/I2C3_SMBA/TIM12_CH2/FMC_D17/DCMI_D0/LCD_R3/EVENTOUT, N15 PH11/TIM5_CH2/I2C4_SCL/FMC_D19/DCMI_D2/LCD_R5/EVENTOUT, P13 PH6/I2C2_SMBA/SPI5_SCK/TIM12_CH1/ETH_MII_RXD2/FMC_SDNE1/DCMI_D8/EVENTOUT, P14 PH8/I2C3_SDA/FMC_D16/DCMI_HSYNC/LCD_R2/EVENTOUT, P15 PH10/TIM5_CH1/I2C4_SMBA/FMC_D18/DCMI_D1/LCD_R4/EVENTOUT
part G pins: B9 PJ13/LCD_G4/LCD_B1/EVENTOUT, B10 PJ12/LCD_G3/LCD_B0/EVENTOUT, C2 PI8/EVENTOUT, C3 PI4/TIM8_BKIN/SAI2_MCLK_A/FMC_NBL2/DCMI_D5/LCD_B4/EVENTOUT, C4 PK7/LCD_DE/EVENTOUT, C5 PK6/LCD_B7/EVENTOUT, C6 PK5/LCD_B6/EVENTOUT, C9 PJ14/LCD_B2/EVENTOUT, C13 PI3/TIM8_ETR/SPI2_MOSI/I2S2_SD/FMC_D27/DCMI_D10/EVENTOUT, C14 PI2/TIM8_CH4/SPI2_MISO/FMC_D26/DCMI_D9/LCD_G7/EVENTOUT, D3 PI5/TIM8_CH1/SAI2_SCK_A/FMC_NBL3/DCMI_VSYNC/LCD_B5/EVENTOUT, D4 PI7/TIM8_CH3/SAI2_FS_A/FMC_D29/DCMI_D7/LCD_B7/EVENTOUT, D5 PI10/ETH_MII_RX_ER/FMC_D31/LCD_HSYNC/EVENTOUT, D6 PI6/TIM8_CH2/SAI2_SD_A/FMC_D28/DCMI_D6/LCD_B6/EVENTOUT, D7 PK4/LCD_B5/EVENTOUT, D8 PK3/LCD_B4/EVENTOUT, D10 PJ15/LCD_B3/EVENTOUT, D14 PI1/TIM8_BKIN2/SPI2_SCK/I2S2_CK/FMC_D25/DCMI_D8/LCD_G6/EVENTOUT, E3 PI12/LCD_HSYNC/EVENTOUT, E4 PI9/UART4_RX/CAN1_RX/FMC_D30/LCD_VSYNC/EVENTOUT, E14 PI0/TIM5_CH4/SPI2_NSS/I2S2_WS/FMC_D24/DCMI_D13/LCD_G5/EVENTOUT, F3 PI11/LCD_G6/OTG_HS_ULPI_DIR/EVENTOUT, G3 PI13/LCD_VSYNC/EVENTOUT, G4 PI15/LCD_G2/LCD_R0/EVENTOUT, H3 PI14/LCD_CLK/EVENTOUT, M9 PJ4/LCD_R5/EVENTOUT, M14 PJ5/LCD_R6/EVENTOUT, N8 PJ3/LCD_R4/EVENTOUT, P7 PJ2/DSI_TE/LCD_R3/EVENTOUT, R6 PJ0/LCD_R7/LCD_R1/EVENTOUT, R7 PJ1/LCD_R2/EVENTOUT

## STM32G0B1RET6
designator U?
IC MCU 32BIT 512KB FLASH 64LQFP; Manufacturer: STMicroelectronics; Manufacturer Part Number: STM32G0B1RET6; Item Type: Microcontrollers; Supplier: Future Electronics; Supplier Part Number: 4135249; RoHS: Yes; Stock: 320; Pricing: 160=3.74, 320=3.68, 480=3.64, 640=3.62, 800=3.54 (USD); LCSC Part Number: C2829307
footprint LQFP-64(10x10)
part A pins: 6 VBAT, 7 VREF+, 8 VDD/VDDA, 9 VSS/VSSA
part B pins: 1 PC11, 2 PC12, 3 PC13, 4 PC14-OSC32_IN, 5 PC15-OSC32_OUT, 10 PF0-OSC_IN, 11 PF1-OSC_OUT, 12 PF2-NRST, 13 PC0, 14 PC1, 15 PC2, 16 PC3, 17 PA0, 18 PA1, 19 PA2, 20 PA3, 21 PA4, 22 PA5, 23 PA6, 24 PA7, 25 PC4, 26 PC5, 27 PB0, 28 PB1, 29 PB2, 30 PB10, 31 PB11, 32 PB12, 33 PB13, 34 PB14, 35 PB15, 36 PA8, 37 PA9, 38 PC6, 39 PC7, 40 PD8, 41 PD9, 42 PA10, 43 PA11[PA9], 44 PA12[PA10], 45 PA13, 46 PA14-BOOT0, 47 PA15, 48 PC8, 49 PC9, 50 PD0, 51 PD1, 52 PD2, 53 PD3, 54 PD4, 55 PD5, 56 PD6, 57 PB3, 58 PB4, 59 PB5, 60 PB6, 61 PB7, 62 PB8, 63 PB9, 64 PC10

## STM32G030F6P6
designator U?
IC MCU 32BIT 32KB FLASH 20TSSOP; Manufacturer: STMicroelectronics; Manufacturer Part Number: STM32G030F6P6; Supplier: Future Electronics; LCSC Part Number: C724040; RoHS: Yes; Item Type: IC; Stock: 15; Pricing: 20=0.745, 296=0.71, 1110=0.68, 1850=0.67, 3700=0.635 (USD); ComponentLink1URL: http://www.farnell.com/datasheets/2882477.pdf?src-supplier=Farnell; ComponentLink1Description: http://www.farnell.com/datasheets/2882477.pdf?src-supplier=Farnell; ComponentLink2URL: https://www.st.com/resource/en/datasheet/stm32g030c6.pdf?src-supplier=Digikey; ComponentLink2Description: https://www.st.com/resource/en/datasheet/stm32g030c6.pdf?src-supplier=Digikey; ComponentLink3URL: https://datasheet.octopart.com/STM32G030F6P6-STMicroelectronics-datasheet-137692524.pdf?src-supplier=TME; ComponentLink3Description: https://datasheet.octopart.com/STM32G030F6P6-STMicroelectronics-datasheet-137692524.pdf?src-supplier=TME
footprint TSSOP-20
pins: 1 PB7/PB8, 2 PB9/PC14-OSC32_IN, 3 PC15-OSC32_OUT, 4 VDD/VDDA, 5 VSS/VSSA, 6 NRST, 7 PA0, 8 PA1, 9 PA2, 10 PA3, 11 PA4, 12 PA5, 13 PA6, 14 PA7, 15 PB0/PB1/PB2/PA8, 16 PA11, 17 PA12, 18 PA13, 19 PA15/PA14-BOOT0, 20 PB3/PB4/PB5/PB6

## STM32G050C8T6
designator U?
IC MCU 32BIT 64KB FLASH 48LQFP; Manufacturer: STMicroelectronics; Manufacturer Part Number: STM32G050C8T6; Supplier: Mouser; LCSC Part Number: C3227086; RoHS: Yes; Item Type: IC; Stock: 2733; Pricing: 1=2.3, 10=1.75, 50=1.75, 100=1.67, 1000=1.12, 10000=1.04 (USD)
footprint 48-LQFP (7x7)_
part A pins: 1 PC13, 2 PC14-OSC32_IN, 3 PC15-OSC32_OUT, 4 VBAT, 5 VREF+, 6 VDD/VDDA, 7 VSS/VSSA, 8 PF0-OSC_IN, 9 PF1-OSC_OUT, 10 PF2-NRST, 36 PA14-BOOT0
part B pins: 11 PA0, 12 PA1, 13 PA2, 14 PA3, 15 PA4, 16 PA5, 17 PA6, 18 PA7, 19 PB0, 20 PB1, 21 PB2, 22 PB10, 23 PB11, 24 PB12, 25 PB13, 26 PB14, 27 PB15, 28 PA8, 29 PA9, 30 PC6, 31 PC7, 32 PA10, 33 PA11[PA9], 34 PA12[PA10], 35 PA13, 37 PA15, 38 PD0, 39 PD1, 40 PD2, 41 PD3, 42 PB3, 43 PB4, 44 PB5, 45 PB6, 46 PB7, 47 PB8, 48 PB9

## STM32H503CBT6
designator U?
IC MCU 32BIT 128KB FLASH 48LQFP; Manufacturer: STMicroelectronics; Manufacturer Part Number: STM32H503CBT6; Supplier: Mouser; LCSC Part Number: C17700273; RoHS: No; Item Type: IC; Stock: 1422; Pricing: 1=3.69, 10=3.31, 50=3.31, 100=2.71, 1000=1.95, 10000=1.91 (USD)
footprint 48-LQFP (7x7)_
part A pins: 1 VBAT, 8 VSSA/VREF-, 9 VDDA/VREF+, 22 VCAP, 23 VSS, 24 VDD, 35 VSS, 36 VDD, 46 VCAP, 47 VSS, 48 VDD
part B pins: 2 PC13, 3 PC14-OSC32_IN, 4 PC15-OSC32_OUT, 5 PH0-OSC_IN, 6 PH1-OSC_OUT, 7 NRST, 10 PA0, 11 PA1, 12 PA2, 13 PA3, 14 PA4, 15 PA5, 16 PA6, 17 PA7, 18 PB0, 19 PB1, 20 PB2, 21 PB10, 25 PB12, 26 PB13, 27 PB14, 28 PB15, 29 PA8, 30 PA9, 31 PA10, 32 PA11, 33 PA12, 34 PA13, 37 PA14, 38 PA15, 39 PB3, 40 PB4, 41 PB5, 42 PB6, 43 PB7, 44 BOOT0, 45 PB8
part B text: MCU CLK & RST

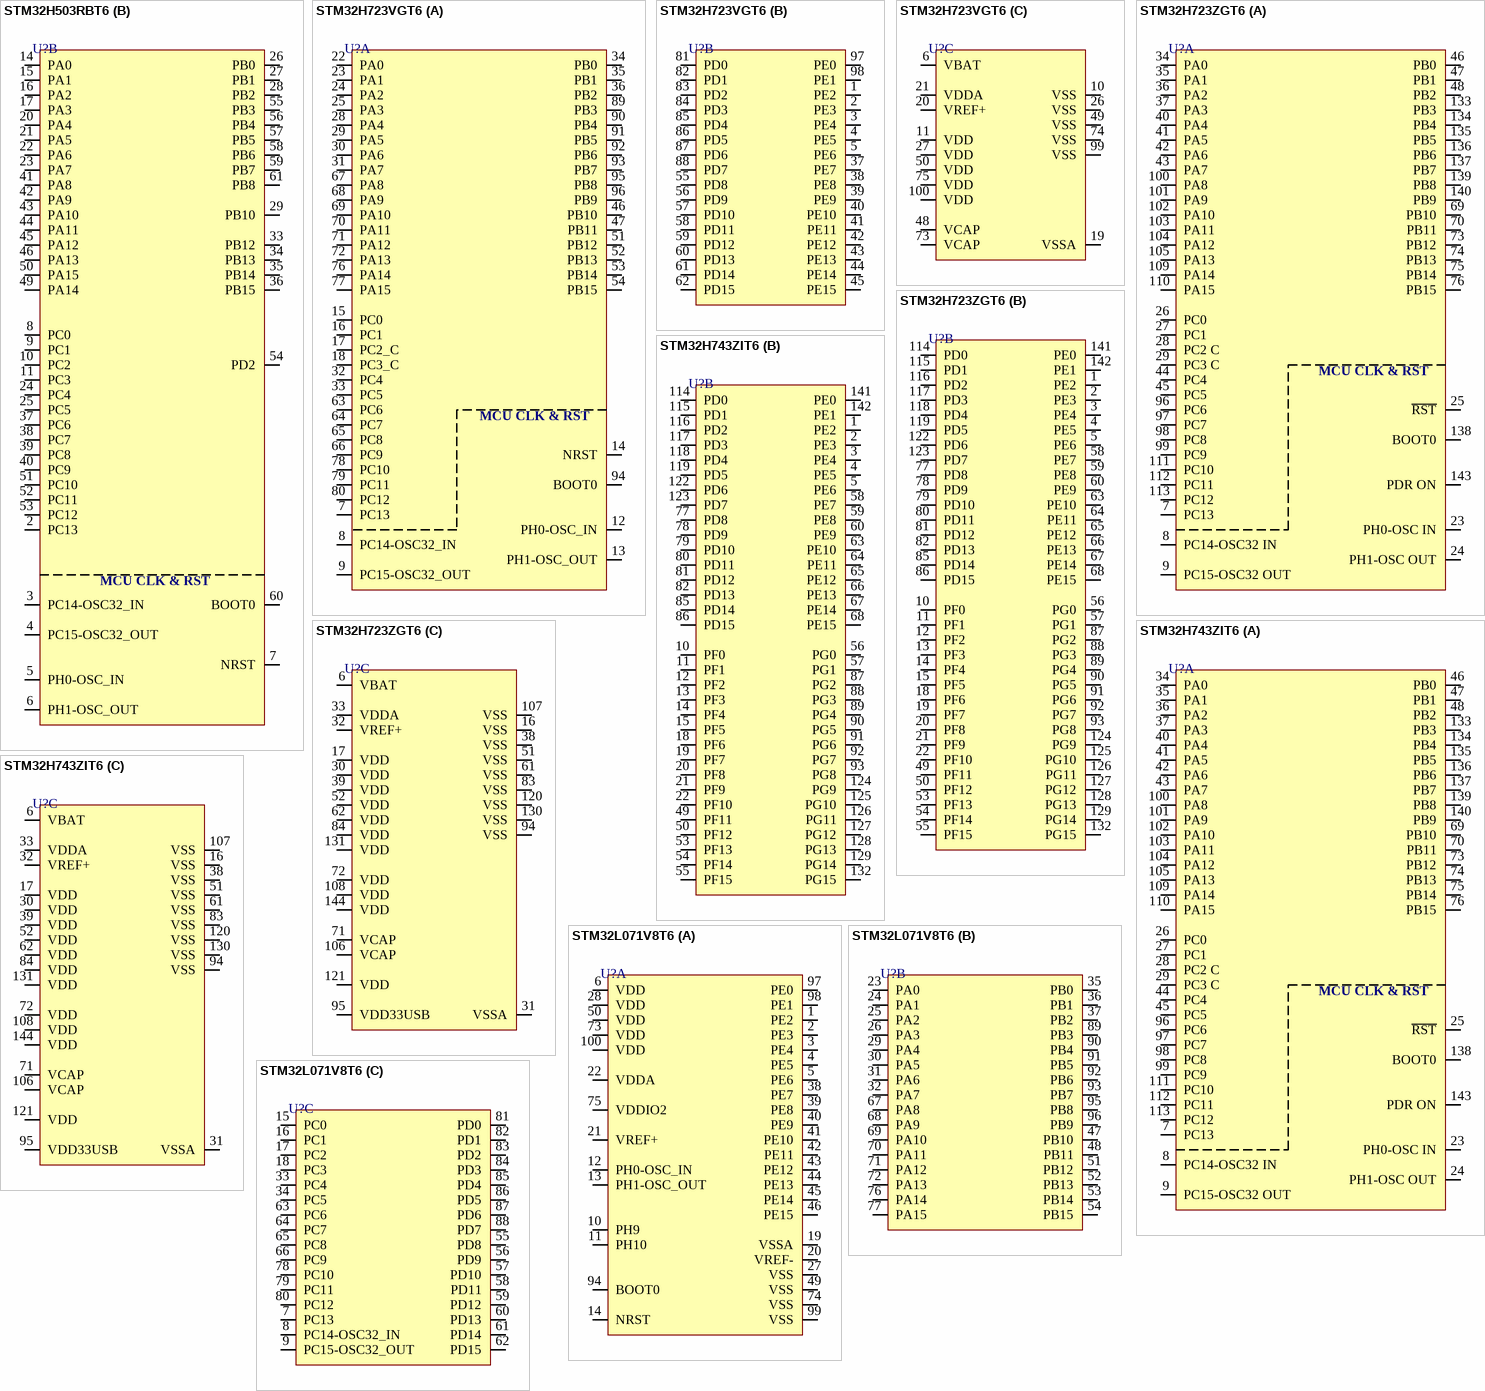
[diagram p12: symbols STM32H503RBT6 to STM32L071V8T6]

## STM32H503RBT6
designator U?
IC MCU 32BIT 128KB FLASH 64LQFP; Manufacturer: STMicroelectronics; Manufacturer Part Number: STM32H503RBT6; Supplier: Mouser; LCSC Part Number: C6807804; RoHS: No; Item Type: IC; Stock: 991; Pricing: 1=3.75, 10=2.6, 50=2.6, 100=2.28, 1000=2.09, 10000=1.98 (USD)
footprint 64-LQFP (10x10)
part A pins: 1 VBAT, 12 VSSA/VREF-, 13 VDDA/VREF+, 18 VSS, 19 VDD, 30 VCAP, 31 VSS, 32 VDD, 47 VSS, 48 VDD, 62 VCAP, 63 VSS, 64 VDD
part B pins: 2 PC13, 3 PC14-OSC32_IN, 4 PC15-OSC32_OUT, 5 PH0-OSC_IN, 6 PH1-OSC_OUT, 7 NRST, 8 PC0, 9 PC1, 10 PC2, 11 PC3, 14 PA0, 15 PA1, 16 PA2, 17 PA3, 20 PA4, 21 PA5, 22 PA6, 23 PA7, 24 PC4, 25 PC5, 26 PB0, 27 PB1, 28 PB2, 29 PB10, 33 PB12, 34 PB13, 35 PB14, 36 PB15, 37 PC6, 38 PC7, 39 PC8, 40 PC9, 41 PA8, 42 PA9, 43 PA10, 44 PA11, 45 PA12, 46 PA13, 49 PA14, 50 PA15, 51 PC10, 52 PC11, 53 PC12, 54 PD2, 55 PB3, 56 PB4, 57 PB5, 58 PB6, 59 PB7, 60 BOOT0, 61 PB8
part B text: MCU CLK & RST

## STM32H723VGT6
designator U?
IC MCU 32BIT 1MB FLASH 100LQFP; Manufacturer: STMicroelectronics; Manufacturer Part Number: STM32H723VGT6; Item Type: Microcontrollers; Frequency: 550MHz; Max Supply Voltage: 3.6V; Nominal Supply Current: 4uA; Number of A/D Converters: 1; Number of Channels: 14; Number of I2C Channels: 5; Number of I/Os: 80; Number of Timers/Counters: 4; Number of UART Channels: 6; RAM Size: 564KB; Supplier: Arrow Electronics; LCSC Part Number: C730142; RoHS: No; Stock: 102408; Pricing: 1=9.579, 10=8.258, 25=7.389, 100=7.316, 250=6.922, 540=6.641, 1080=6.564 (USD); Min Operating Temperature: -40°C; Max Operating Temperature: 85°C; Density: 1MB; Number of SPI Channels: 5
footprint LQFP-100
part A pins: 7 PC13, 8 PC14-OSC32_IN, 9 PC15-OSC32_OUT, 12 PH0-OSC_IN, 13 PH1-OSC_OUT, 14 NRST, 15 PC0, 16 PC1, 17 PC2_C, 18 PC3_C, 22 PA0, 23 PA1, 24 PA2, 25 PA3, 28 PA4, 29 PA5, 30 PA6, 31 PA7, 32 PC4, 33 PC5, 34 PB0, 35 PB1, 36 PB2, 46 PB10, 47 PB11, 51 PB12, 52 PB13, 53 PB14, 54 PB15, 63 PC6, 64 PC7, 65 PC8, 66 PC9, 67 PA8, 68 PA9, 69 PA10, 70 PA11, 71 PA12, 72 PA13, 76 PA14, 77 PA15, 78 PC10, 79 PC11, 80 PC12, 89 PB3, 90 PB4, 91 PB5, 92 PB6, 93 PB7, 94 BOOT0, 95 PB8, 96 PB9
part B pins: 1 PE2, 2 PE3, 3 PE4, 4 PE5, 5 PE6, 37 PE7, 38 PE8, 39 PE9, 40 PE10, 41 PE11, 42 PE12, 43 PE13, 44 PE14, 45 PE15, 55 PD8, 56 PD9, 57 PD10, 58 PD11, 59 PD12, 60 PD13, 61 PD14, 62 PD15, 81 PD0, 82 PD1, 83 PD2, 84 PD3, 85 PD4, 86 PD5, 87 PD6, 88 PD7, 97 PE0, 98 PE1
part C pins: 6 VBAT, 10 VSS, 11 VDD, 19 VSSA, 20 VREF+, 21 VDDA, 26 VSS, 27 VDD, 48 VCAP, 49 VSS, 50 VDD, 73 VCAP, 74 VSS, 75 VDD, 99 VSS, 100 VDD
part A text: MCU CLK & RST

## STM32H723ZGT6
designator U?
IC MCU 32BIT 1MB FLASH 144LQFP; Manufacturer: STMicroelectronics; Manufacturer Part Number: STM32H723ZGT6; Interface: 39,40,224,1514,1515,1518,1532,1533Interface; Memory Format: 4498,11064MemoryType; Data Bus Width: 32b; Frequency: 550MHz; Max Supply Voltage: 3.6V; Min Supply Voltage: 1.62V; Nominal Supply Current: 4uA; Number of A/D Converters: 1NUMBER; Number of ADC Channels: 16NUMBER; Number of I2C Channels: 5NUMBER; Number of I/Os: 112NUMBER; Number of SPI Channels: 6NUMBER; Number of Timers/Counters: 4NUMBER; RAM Size: 564KB; Supplier: Future Electronics; LCSC Part Number: C730146; RoHS: No; Item Type: IC; Stock: 4380; Pricing: 60=7.31, 120=7.27, 180=7.25, 240=7.23, 300=7.18 (USD); Min Operating Temperature: -40°C; Max Operating Temperature: 85°C; Density: 1MB; Memory Size: 1MB; Number of Ethernet Channels: 1NUMBER; Number of UART Channels: 6NUMBER; Number of USB Channels: 1NUMBER; Height: 1.6mm
footprint LQFP-144(20x20)
part A pins: 7 PC13, 8 PC14-OSC32 IN, 9 PC15-OSC32 OUT, 23 PH0-OSC IN, 24 PH1-OSC OUT, 25 ~{RST}, 26 PC0, 27 PC1, 28 PC2 C, 29 PC3 C, 34 PA0, 35 PA1, 36 PA2, 37 PA3, 40 PA4, 41 PA5, 42 PA6, 43 PA7, 44 PC4, 45 PC5, 46 PB0, 47 PB1, 48 PB2, 69 PB10, 70 PB11, 73 PB12, 74 PB13, 75 PB14, 76 PB15, 96 PC6, 97 PC7, 98 PC8, 99 PC9, 100 PA8, 101 PA9, 102 PA10, 103 PA11, 104 PA12, 105 PA13, 109 PA14, 110 PA15, 111 PC10, 112 PC11, 113 PC12, 133 PB3, 134 PB4, 135 PB5, 136 PB6, 137 PB7, 138 BOOT0, 139 PB8, 140 PB9, 143 PDR ON
part B pins: 1 PE2, 2 PE3, 3 PE4, 4 PE5, 5 PE6, 10 PF0, 11 PF1, 12 PF2, 13 PF3, 14 PF4, 15 PF5, 18 PF6, 19 PF7, 20 PF8, 21 PF9, 22 PF10, 49 PF11, 50 PF12, 53 PF13, 54 PF14, 55 PF15, 56 PG0, 57 PG1, 58 PE7, 59 PE8, 60 PE9, 63 PE10, 64 PE11, 65 PE12, 66 PE13, 67 PE14, 68 PE15, 77 PD8, 78 PD9, 79 PD10, 80 PD11, 81 PD12, 82 PD13, 85 PD14, 86 PD15, 87 PG2, 88 PG3, 89 PG4, 90 PG5, 91 PG6, 92 PG7, 93 PG8, 114 PD0, 115 PD1, 116 PD2, 117 PD3, 118 PD4, 119 PD5, 122 PD6, 123 PD7, 124 PG9, 125 PG10, 126 PG11, 127 PG12, 128 PG13, 129 PG14, 132 PG15, 141 PE0, 142 PE1
part C pins: 6 VBAT (power), 16 VSS (power), 17 VDD (power), 30 VDD (power), 31 VSSA (power), 32 VREF+ (power), 33 VDDA (power), 38 VSS (power), 39 VDD (power), 51 VSS (power), 52 VDD (power), 61 VSS (power), 62 VDD (power), 71 VCAP (power), 72 VDD (power), 83 VSS (power), 84 VDD (power), 94 VSS (power), 95 VDD33USB (power), 106 VCAP (power), 107 VSS (power), 108 VDD (power), 120 VSS (power), 121 VDD (power), 130 VSS (power), 131 VDD (power), 144 VDD (power)
part A text: MCU CLK & RST

## STM32H743ZIT6
designator U?
IC MCU 32BIT 2MB FLASH 144LQFP; Manufacturer: STMicroelectronics; Manufacturer Part Number: STM32H743ZIT6; Nominal Supply Current: 4uA; Number of A/D Converters: 2NUMBER; Number of Channels: 28NUMBER; Number of I2C Channels: 4NUMBER; Number of SPI Channels: 6NUMBER; Supplier: Future Electronics; LCSC Part Number: C114408; RoHS: Yes; Item Type: IC; Stock: 12840; Pricing: 60=10.13, 120=10.07, 180=10.04, 240=10.02, 300=9.95 (USD); Density: 2MB; Number of D/A Converters: 2NUMBER; Number of PWM Channels: 2NUMBER; Number of Timers/Counters: 2NUMBER; Number of UART Channels: 4NUMBER; Number of USB Channels: 2NUMBER; Height: 1.6mm; ComponentLink1URL: https://datasheet.ciiva.com/68216/2551152-68216837.pdf?src-supplier=Farnell; ComponentLink1Description: https://datasheet.ciiva.com/68216/2551152-68216837.pdf?src-supplier=Farnell
footprint LQFP-144(20x20)
part A pins: 7 PC13, 8 PC14-OSC32 IN, 9 PC15-OSC32 OUT, 23 PH0-OSC IN, 24 PH1-OSC OUT, 25 ~{RST}, 26 PC0, 27 PC1, 28 PC2 C, 29 PC3 C, 34 PA0, 35 PA1, 36 PA2, 37 PA3, 40 PA4, 41 PA5, 42 PA6, 43 PA7, 44 PC4, 45 PC5, 46 PB0, 47 PB1, 48 PB2, 69 PB10, 70 PB11, 73 PB12, 74 PB13, 75 PB14, 76 PB15, 96 PC6, 97 PC7, 98 PC8, 99 PC9, 100 PA8, 101 PA9, 102 PA10, 103 PA11, 104 PA12, 105 PA13, 109 PA14, 110 PA15, 111 PC10, 112 PC11, 113 PC12, 133 PB3, 134 PB4, 135 PB5, 136 PB6, 137 PB7, 138 BOOT0, 139 PB8, 140 PB9, 143 PDR ON
part B pins: 1 PE2, 2 PE3, 3 PE4, 4 PE5, 5 PE6, 10 PF0, 11 PF1, 12 PF2, 13 PF3, 14 PF4, 15 PF5, 18 PF6, 19 PF7, 20 PF8, 21 PF9, 22 PF10, 49 PF11, 50 PF12, 53 PF13, 54 PF14, 55 PF15, 56 PG0, 57 PG1, 58 PE7, 59 PE8, 60 PE9, 63 PE10, 64 PE11, 65 PE12, 66 PE13, 67 PE14, 68 PE15, 77 PD8, 78 PD9, 79 PD10, 80 PD11, 81 PD12, 82 PD13, 85 PD14, 86 PD15, 87 PG2, 88 PG3, 89 PG4, 90 PG5, 91 PG6, 92 PG7, 93 PG8, 114 PD0, 115 PD1, 116 PD2, 117 PD3, 118 PD4, 119 PD5, 122 PD6, 123 PD7, 124 PG9, 125 PG10, 126 PG11, 127 PG12, 128 PG13, 129 PG14, 132 PG15, 141 PE0, 142 PE1
part C pins: 6 VBAT (power), 16 VSS (power), 17 VDD (power), 30 VDD (power), 31 VSSA (power), 32 VREF+ (power), 33 VDDA (power), 38 VSS (power), 39 VDD (power), 51 VSS (power), 52 VDD (power), 61 VSS (power), 62 VDD (power), 71 VCAP (power), 72 VDD (power), 83 VSS (power), 84 VDD (power), 94 VSS (power), 95 VDD33USB (power), 106 VCAP (power), 107 VSS (power), 108 VDD (power), 120 VSS (power), 121 VDD (power), 130 VSS (power), 131 VDD (power), 144 VDD (power)
part A text: MCU CLK & RST

## STM32L071V8T6
designator U?
IC MCU 32BIT 64KB FLASH 100LQFP; Manufacturer: STMicroelectronics; Manufacturer Part Number: STM32L071V8T6; Interface: I2C,SPI,IrDA,UART,USART; Peripherals: Brown-out Detect/Reset,POR,PWM,WDT,DMA; Core Architecture: ARM; Number of I/Os: 84; Oscillator Type: Internal; Supplier: Digikey; Supplier Part Number: 497-17920-ND; RoHS: Yes; Category: Microcontrollers; Stock: 394; Pricing: 1=5.13, 10=4.606, 25=4.3544, 80=3.77375, 230=3.58022, 540=3.21254, 1080=2.70936, 2700=2.5739 (USD); Case/Package: LQFP; Min Operating Temperature: -40°C; Max Operating Temperature: 85°C; Memory Format: FLASH; Memory Size: 64KB; Series: STM32L0; Packaging: Tray; RoHS Compliant: Yes; ComponentLink1URL: http://www.st.com/content/ccc/resource/technical/document/datasheet/b5/24/80/11/51/59/47/f7/DM00141136.pdf/files/DM00141136.pdf/jcr:content/translations/en.DM00141136.pdf?src-supplier=Digikey; ComponentLink1Description: http://www.st.com/content/ccc/resource/technical/document/datasheet/b5/24/80/11/51/59/47/f7/DM00141136.pdf/files/DM00141136.pdf/jcr:content/translations/en.DM00141136.pdf?src-supplier=Digikey; LCSC Part Number: C2971584; Item Type: IC; ComponentLink2Description: LCSC; ComponentLink2URL: https://www.lcsc.com/product-detail/Microcontroller-Units-MCUs-MPUs-SOCs_STMicroelectronics-STM32L071V8T6_C2971584.html
footprint LQFP-100
part A pins: 1 PE2, 2 PE3, 3 PE4, 4 PE5, 5 PE6, 6 VDD, 10 PH9, 11 PH10, 12 PH0-OSC_IN, 13 PH1-OSC_OUT, 14 NRST, 19 VSSA, 20 VREF-, 21 VREF+, 22 VDDA, 27 VSS, 28 VDD, 38 PE7, 39 PE8, 40 PE9, 41 PE10, 42 PE11, 43 PE12, 44 PE13, 45 PE14, 46 PE15, 49 VSS, 50 VDD, 73 VDD, 74 VSS, 75 VDDIO2, 94 BOOT0, 97 PE0, 98 PE1, 99 VSS, 100 VDD
part B pins: 23 PA0, 24 PA1, 25 PA2, 26 PA3, 29 PA4, 30 PA5, 31 PA6, 32 PA7, 35 PB0, 36 PB1, 37 PB2, 47 PB10, 48 PB11, 51 PB12, 52 PB13, 53 PB14, 54 PB15, 67 PA8, 68 PA9, 69 PA10, 70 PA11, 71 PA12, 72 PA13, 76 PA14, 77 PA15, 89 PB3, 90 PB4, 91 PB5, 92 PB6, 93 PB7, 95 PB8, 96 PB9
part C pins: 7 PC13, 8 PC14-OSC32_IN, 9 PC15-OSC32_OUT, 15 PC0, 16 PC1, 17 PC2, 18 PC3, 33 PC4, 34 PC5, 55 PD8, 56 PD9, 57 PD10, 58 PD11, 59 PD12, 60 PD13, 61 PD14, 62 PD15, 63 PC6, 64 PC7, 65 PC8, 66 PC9, 78 PC10, 79 PC11, 80 PC12, 81 PD0, 82 PD1, 83 PD2, 84 PD3, 85 PD4, 86 PD5, 87 PD6, 88 PD7

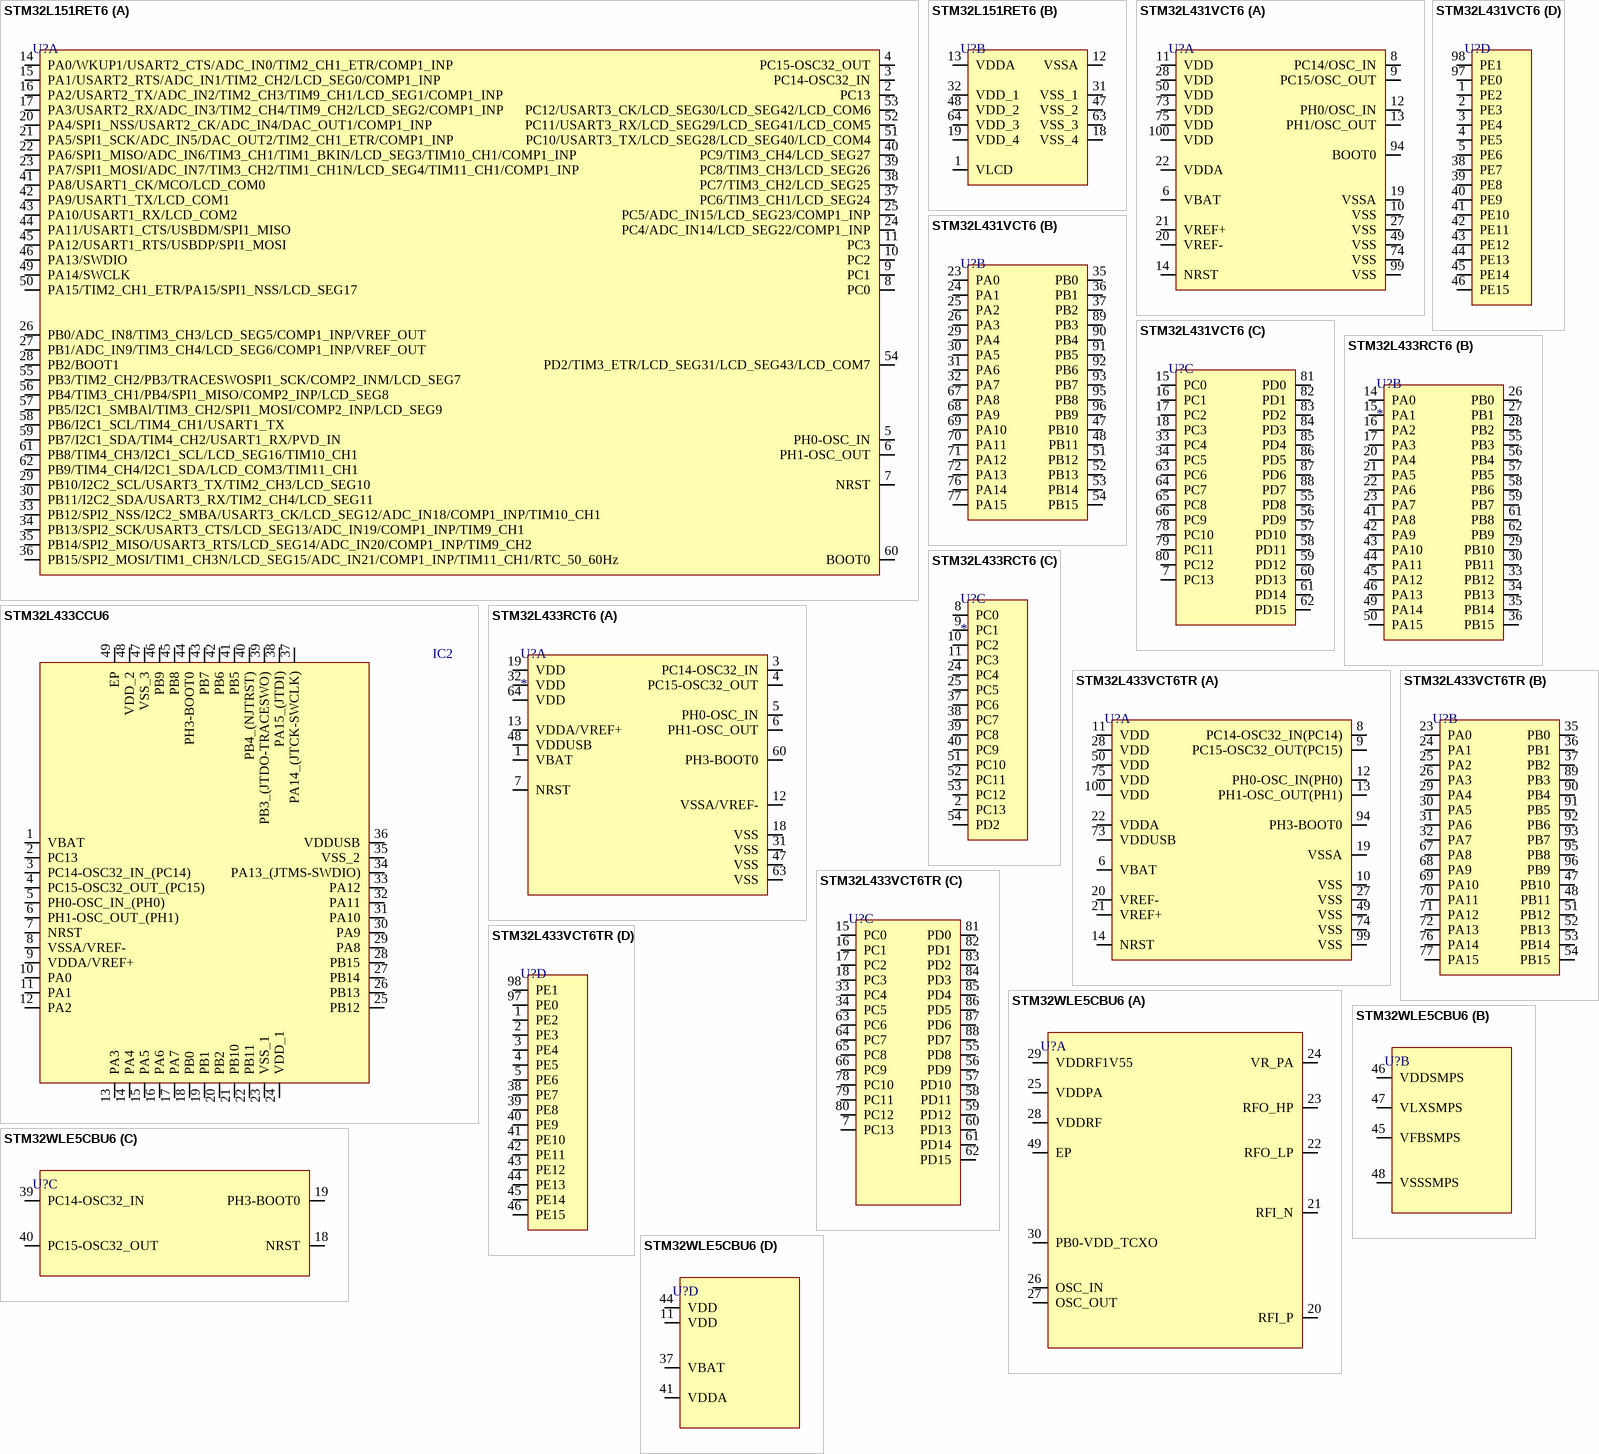
[diagram p13: symbols STM32L151RET6 to STM32WLE5CBU6]

## STM32L151RET6
designator U?
IC MCU 32BIT 512KB FLASH 64LQFP; Manufacturer: STMicroelectronics; Manufacturer Part Number: STM32L151RET6; Supplier: Mouser; LCSC Part Number: C256869; RoHS: Yes; Item Type: IC; Stock: 1790; Pricing: 1=9.3, 10=7.24, 50=6.72, 100=6.01, 1000=5.42, 10000=5.42 (USD); ComponentLink1URL: https://datasheet.ciiva.com/48492/dm00098321-48492427.pdf?src-supplier=Avnet; ComponentLink1Description: https://datasheet.ciiva.com/48492/dm00098321-48492427.pdf?src-supplier=Avnet
footprint LQFP-64(10x10)
part A pins: 2 PC13, 3 PC14-OSC32_IN, 4 PC15-OSC32_OUT, 5 PH0-OSC_IN, 6 PH1-OSC_OUT, 7 NRST, 8 PC0, 9 PC1, 10 PC2, 11 PC3, 14 PA0/WKUP1/USART2_CTS/ADC_IN0/TIM2_CH1_ETR/COMP1_INP, 15 PA1/USART2_RTS/ADC_IN1/TIM2_CH2/LCD_SEG0/COMP1_INP, 16 PA2/USART2_TX/ADC_IN2/TIM2_CH3/TIM9_CH1/LCD_SEG1/COMP1_INP, 17 PA3/USART2_RX/ADC_IN3/TIM2_CH4/TIM9_CH2/LCD_SEG2/COMP1_INP, 20 PA4/SPI1_NSS/USART2_CK/ADC_IN4/DAC_OUT1/COMP1_INP, 21 PA5/SPI1_SCK/ADC_IN5/DAC_OUT2/TIM2_CH1_ETR/COMP1_INP, 22 PA6/SPI1_MISO/ADC_IN6/TIM3_CH1/TIM1_BKIN/LCD_SEG3/TIM10_CH1/COMP1_INP, 23 PA7/SPI1_MOSI/ADC_IN7/TIM3_CH2/TIM1_CH1N/LCD_SEG4/TIM11_CH1/COMP1_INP, 24 PC4/ADC_IN14/LCD_SEG22/COMP1_INP, 25 PC5/ADC_IN15/LCD_SEG23/COMP1_INP, 26 PB0/ADC_IN8/TIM3_CH3/LCD_SEG5/COMP1_INP/VREF_OUT, 27 PB1/ADC_IN9/TIM3_CH4/LCD_SEG6/COMP1_INP/VREF_OUT, 28 PB2/BOOT1, 29 PB10/I2C2_SCL/USART3_TX/TIM2_CH3/LCD_SEG10, 30 PB11/I2C2_SDA/USART3_RX/TIM2_CH4/LCD_SEG11, 33 PB12/SPI2_NSS/I2C2_SMBA/USART3_CK/LCD_SEG12/ADC_IN18/COMP1_INP/TIM10_CH1, 34 PB13/SPI2_SCK/USART3_CTS/LCD_SEG13/ADC_IN19/COMP1_INP/TIM9_CH1, 35 PB14/SPI2_MISO/USART3_RTS/LCD_SEG14/ADC_IN20/COMP1_INP/TIM9_CH2, 36 PB15/SPI2_MOSI/TIM1_CH3N/LCD_SEG15/ADC_IN21/COMP1_INP/TIM11_CH1/RTC_50_60Hz, 37 PC6/TIM3_CH1/LCD_SEG24, 38 PC7/TIM3_CH2/LCD_SEG25, 39 PC8/TIM3_CH3/LCD_SEG26, 40 PC9/TIM3_CH4/LCD_SEG27, 41 PA8/USART1_CK/MCO/LCD_COM0, 42 PA9/USART1_TX/LCD_COM1, 43 PA10/USART1_RX/LCD_COM2, 44 PA11/USART1_CTS/USBDM/SPI1_MISO, 45 PA12/USART1_RTS/USBDP/SPI1_MOSI, 46 PA13/SWDIO, 49 PA14/SWCLK, 50 PA15/TIM2_CH1_ETR/PA15/SPI1_NSS/LCD_SEG17, 51 PC10/USART3_TX/LCD_SEG28/LCD_SEG40/LCD_COM4, 52 PC11/USART3_RX/LCD_SEG29/LCD_SEG41/LCD_COM5, 53 PC12/USART3_CK/LCD_SEG30/LCD_SEG42/LCD_COM6, 54 PD2/TIM3_ETR/LCD_SEG31/LCD_SEG43/LCD_COM7, 55 PB3/TIM2_CH2/PB3/TRACESWOSPI1_SCK/COMP2_INM/LCD_SEG7, 56 PB4/TIM3_CH1/PB4/SPI1_MISO/COMP2_INP/LCD_SEG8, 57 PB5/I2C1_SMBAl/TIM3_CH2/SPI1_MOSI/COMP2_INP/LCD_SEG9, 58 PB6/I2C1_SCL/TIM4_CH1/USART1_TX, 59 PB7/I2C1_SDA/TIM4_CH2/USART1_RX/PVD_IN, 60 BOOT0, 61 PB8/TIM4_CH3/I2C1_SCL/LCD_SEG16/TIM10_CH1, 62 PB9/TIM4_CH4/I2C1_SDA/LCD_COM3/TIM11_CH1
part B pins: 1 VLCD, 12 VSSA, 13 VDDA, 18 VSS_4, 19 VDD_4, 31 VSS_1, 32 VDD_1, 47 VSS_2, 48 VDD_2, 63 VSS_3, 64 VDD_3

## STM32L431VCT6
designator U?
IC MCU 32BIT 256KB FLASH 100LQFP; Manufacturer: STMicroelectronics; Manufacturer Part Number: STM32L431VCT6; Item Type: Microcontrollers; Supplier: Mouser; Supplier Part Number: 511-STM32L431VCT6; RoHS: Yes; Stock: 1939; Pricing: 1=6.76, 10=6.12, 50=4.97, 100=4.85, 1000=4.11, 10000=3.86 (USD); ComponentLink1URL: https://4donline.ihs.com/images/VipMasterIC/IC/SGST/SGST-S-A0003208311/SGST-S-A0003208311-1.pdf?hkey=52A5661711E402568146F3353EA87419&src-supplier=Newark; ComponentLink1Description: https://4donline.ihs.com/images/VipMasterIC/IC/SGST/SGST-S-A0003208311/SGST-S-A0003208311-1.pdf?hkey=52A5661711E402568146F3353EA87419&src-supplier=Newark; ComponentLink2URL: https://4donline.ihs.com/images/VipMasterIC/IC/SGST/SGST-S-A0003208311/SGST-S-A0003208311-1.pdf?hkey=52A5661711E402568146F3353EA87419&src-supplier=Farnell; ComponentLink2Description: https://4donline.ihs.com/images/VipMasterIC/IC/SGST/SGST-S-A0003208311/SGST-S-A0003208311-1.pdf?hkey=52A5661711E402568146F3353EA87419&src-supplier=Farnell; ComponentLink3URL: http://www.st.com/content/ccc/resource/technical/document/reference_manual/group0/b0/ac/3e/8f/6d/21/47/af/DM00151940/files/DM00151940.pdf/jcr:content/translations/en.DM00151940.pdf?src-supplier=Digikey; ComponentLink3Description: http://www.st.com/content/ccc/resource/technical/document/reference_manual/group0/b0/ac/3e/8f/6d/21/47/af/DM00151940/files/DM00151940.pdf/jcr:content/translations/en.DM00151940.pdf?src-supplier=Digikey; ComponentLink4URL: https://datasheet.octopart.com/STM32L431VCT6-STMicroelectronics-datasheet-62341222.pdf?src-supplier=SHENGYU+ELECTRONICS; ComponentLink4Description: https://datasheet.octopart.com/STM32L431VCT6-STMicroelectronics-datasheet-62341222.pdf?src-supplier=SHENGYU+ELECTRONICS; LCSC Part Number: C455384
footprint LQFP-100
part A pins: 6 VBAT, 8 PC14/OSC_IN, 9 PC15/OSC_OUT, 10 VSS, 11 VDD, 12 PH0/OSC_IN, 13 PH1/OSC_OUT, 14 NRST, 19 VSSA, 20 VREF-, 21 VREF+, 22 VDDA, 27 VSS, 28 VDD, 49 VSS, 50 VDD, 73 VDD, 74 VSS, 75 VDD, 94 BOOT0, 99 VSS, 100 VDD
part B pins: 23 PA0, 24 PA1, 25 PA2, 26 PA3, 29 PA4, 30 PA5, 31 PA6, 32 PA7, 35 PB0, 36 PB1, 37 PB2, 47 PB10, 48 PB11, 51 PB12, 52 PB13, 53 PB14, 54 PB15, 67 PA8, 68 PA9, 69 PA10, 70 PA11, 71 PA12, 72 PA13, 76 PA14, 77 PA15, 89 PB3, 90 PB4, 91 PB5, 92 PB6, 93 PB7, 95 PB8, 96 PB9
part C pins: 7 PC13, 15 PC0, 16 PC1, 17 PC2, 18 PC3, 33 PC4, 34 PC5, 55 PD8, 56 PD9, 57 PD10, 58 PD11, 59 PD12, 60 PD13, 61 PD14, 62 PD15, 63 PC6, 64 PC7, 65 PC8, 66 PC9, 78 PC10, 79 PC11, 80 PC12, 81 PD0, 82 PD1, 83 PD2, 84 PD3, 85 PD4, 86 PD5, 87 PD6, 88 PD7
part D pins: 1 PE2, 2 PE3, 3 PE4, 4 PE5, 5 PE6, 38 PE7, 39 PE8, 40 PE9, 41 PE10, 42 PE11, 43 PE12, 44 PE13, 45 PE14, 46 PE15, 97 PE0, 98 PE1

## STM32L433CCU6
designator IC2
IC MCU 32BIT 256KB FLSH 48UFQFPN; Manufacturer: STMicroelectronics; Manufacturer Part Number: STM32L433CCU6; Datasheet Link: http://www.st.com/content/ccc/resource/technical/document/datasheet/f7/a0/fc/27/24/4e/4f/3f/DM00257192.pdf/files/DM00257192.pdf/jcr:content/translations/en.DM00257192.pdf; Height: 0.6mm; Mouser Part Number: 511-STM32L433CCU6; Mouser Price/Stock: https://www.mouser.co.uk/ProductDetail/STMicroelectronics/STM32L433CCU6?qs=dTJS0cRn7oiKq9T6SJeUpg%3D%3D; Arrow Part Number: STM32L433CCU6; Arrow Price/Stock: https://www.arrow.com/en/products/stm32l433ccu6/stmicroelectronics?region=nac; LCSC Part Number: C1341450; Item Type: IC
footprint 48-UFQFPN(7x7)
pins: 1 VBAT (power), 2 PC13, 3 PC14-OSC32_IN_(PC14), 4 PC15-OSC32_OUT_(PC15), 5 PH0-OSC_IN_(PH0), 6 PH1-OSC_OUT_(PH1), 7 NRST, 8 VSSA/VREF- (power), 9 VDDA/VREF+ (power), 10 PA0, 11 PA1, 12 PA2, 13 PA3, 14 PA4, 15 PA5, 16 PA6, 17 PA7, 18 PB0, 19 PB1, 20 PB2, 21 PB10, 22 PB11, 23 VSS_1 (power), 24 VDD_1 (power), 25 PB12, 26 PB13, 27 PB14, 28 PB15, 29 PA8, 30 PA9, 31 PA10, 32 PA11, 33 PA12, 34 PA13_(JTMS-SWDIO), 35 VSS_2 (power), 36 VDDUSB (power), 37 PA14_(JTCK-SWCLK), 38 PA15_(JTDI), 39 PB3_(JTDO-TRACESWO), 40 PB4_(NJTRST), 41 PB5, 42 PB6, 43 PB7, 44 PH3-BOOT0, 45 PB8, 46 PB9, 47 VSS_3 (power), 48 VDD_2 (power), 49 EP